# Altium schematic symbol library SG2002_QFN88_38_20230301_4L_V1.3_16.2_Library.SchLib: 126 symbols (part 2 of 5)
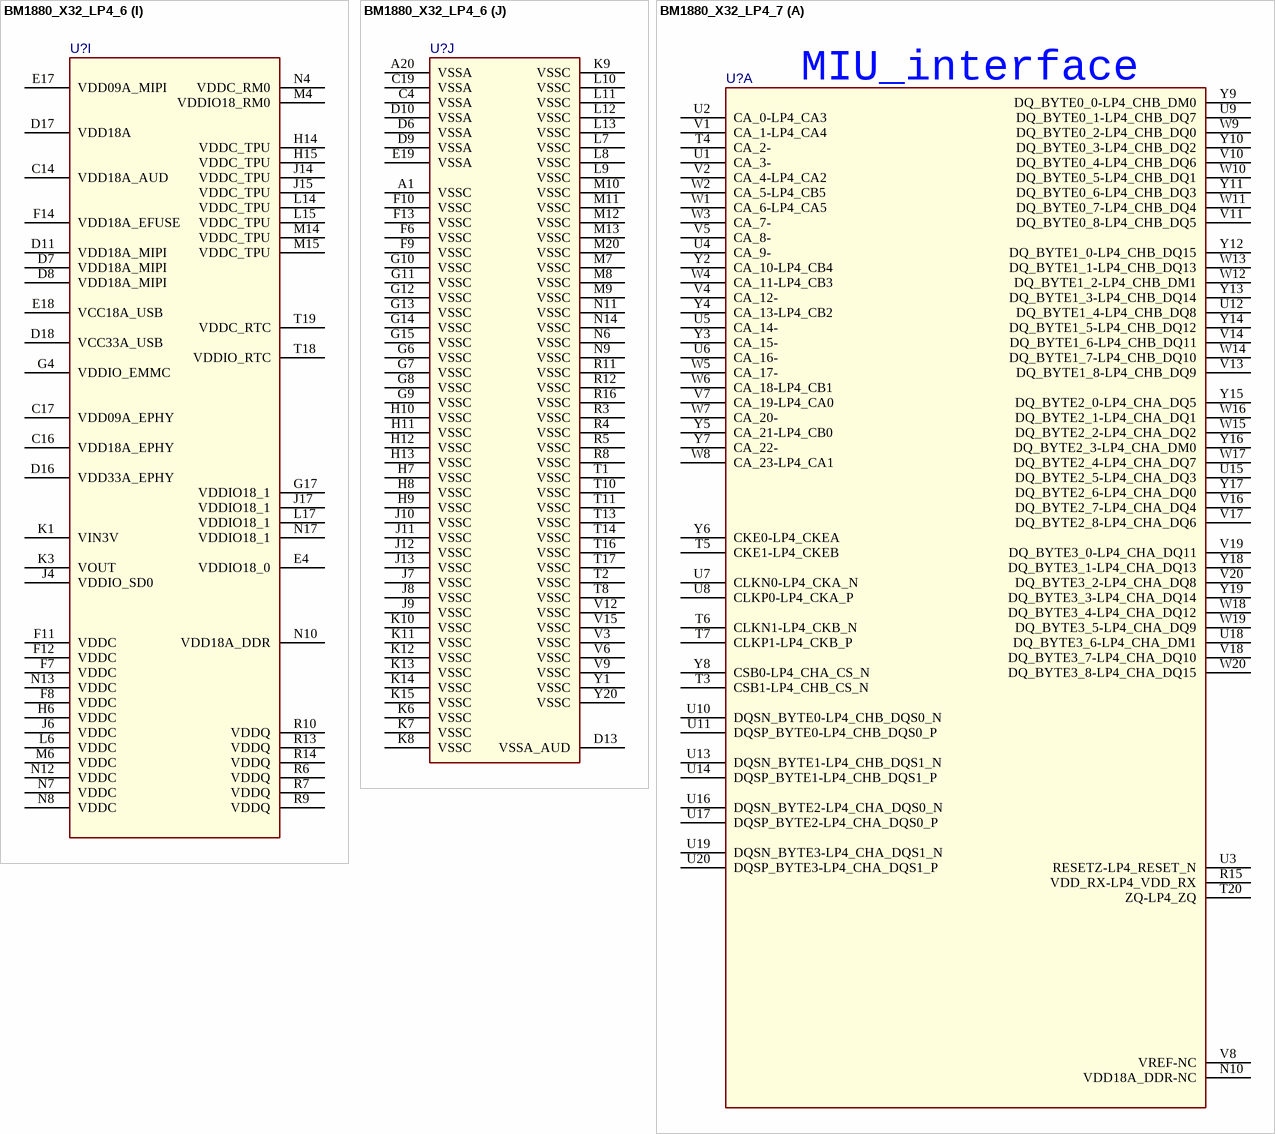
[diagram p50: symbols BM1880_X32_LP4_6 to BM1880_X32_LP4_7]

## BM1880_X32_LP4_6
designator U?
SPLIT_INST: TRUE; SWAP_INFO: (S1+S2+S3+S4+S5+S6+S7+S8+S9+S10)
footprint BGA378-26-2121-socket
part A pins: N10 VDD18A_DDR-NC, R15 VDD_RX-LP4_VDD_RX, T3 CSB1-LP4_CHB_CS_N, T4 CA_2-, T5 CKE1-LP4_CKEB, T6 CLKN1-LP4_CKB_N, T7 CLKP1-LP4_CKB_P, T20 ZQ-LP4_ZQ, U1 CA_3-, U2 CA_0-LP4_CA3, U3 RESETZ-LP4_RESET_N, U4 CA_9-, U5 CA_14-, U6 CA_16-, U7 CLKN0-LP4_CKA_N, U8 CLKP0-LP4_CKA_P, U9 DQ_BYTE0_1-LP4_CHB_DQ7, U10 DQSN_BYTE0-LP4_CHB_DQS0_N, U11 DQSP_BYTE0-LP4_CHB_DQS0_P, U12 DQ_BYTE1_4-LP4_CHB_DQ8, U13 DQSN_BYTE1-LP4_CHB_DQS1_N, U14 DQSP_BYTE1-LP4_CHB_DQS1_P, U15 DQ_BYTE2_5-LP4_CHA_DQ3, U16 DQSN_BYTE2-LP4_CHA_DQS0_N, U17 DQSP_BYTE2-LP4_CHA_DQS0_P, U18 DQ_BYTE3_6-LP4_CHA_DM1, U19 DQSN_BYTE3-LP4_CHA_DQS1_N, U20 DQSP_BYTE3-LP4_CHA_DQS1_P, V1 CA_1-LP4_CA4, V2 CA_4-LP4_CA2, V4 CA_12-, V5 CA_8-, V7 CA_19-LP4_CA0, V8 VREF-NC, V10 DQ_BYTE0_4-LP4_CHB_DQ6, V11 DQ_BYTE0_8-LP4_CHB_DQ5, V13 DQ_BYTE1_8-LP4_CHB_DQ9, V14 DQ_BYTE1_6-LP4_CHB_DQ11, V16 DQ_BYTE2_7-LP4_CHA_DQ4, V17 DQ_BYTE2_8-LP4_CHA_DQ6, V18 DQ_BYTE3_7-LP4_CHA_DQ10, V19 DQ_BYTE3_0-LP4_CHA_DQ11, V20 DQ_BYTE3_2-LP4_CHA_DQ8, W1 CA_6-LP4_CA5, W2 CA_5-LP4_CB5, W3 CA_7-, W4 CA_11-LP4_CB3, W5 CA_17-, W6 CA_18-LP4_CB1, W7 CA_20-, W8 CA_23-LP4_CA1, W9 DQ_BYTE0_2-LP4_CHB_DQ0, W10 DQ_BYTE0_5-LP4_CHB_DQ1, W11 DQ_BYTE0_7-LP4_CHB_DQ4, W12 DQ_BYTE1_2-LP4_CHB_DM1, W13 DQ_BYTE1_1-LP4_CHB_DQ13, W14 DQ_BYTE1_7-LP4_CHB_DQ10, W15 DQ_BYTE2_2-LP4_CHA_DQ2, W16 DQ_BYTE2_1-LP4_CHA_DQ1, W17 DQ_BYTE2_4-LP4_CHA_DQ7, W18 DQ_BYTE3_4-LP4_CHA_DQ12, W19 DQ_BYTE3_5-LP4_CHA_DQ9, W20 DQ_BYTE3_8-LP4_CHA_DQ15, Y2 CA_10-LP4_CB4, Y3 CA_15-, Y4 CA_13-LP4_CB2, Y5 CA_21-LP4_CB0, Y6 CKE0-LP4_CKEA, Y7 CA_22-, Y8 CSB0-LP4_CHA_CS_N, Y9 DQ_BYTE0_0-LP4_CHB_DM0, Y10 DQ_BYTE0_3-LP4_CHB_DQ2, Y11 DQ_BYTE0_6-LP4_CHB_DQ3, Y12 DQ_BYTE1_0-LP4_CHB_DQ15, Y13 DQ_BYTE1_3-LP4_CHB_DQ14, Y14 DQ_BYTE1_5-LP4_CHB_DQ12, Y15 DQ_BYTE2_0-LP4_CHA_DQ5, Y16 DQ_BYTE2_3-LP4_CHA_DM0, Y17 DQ_BYTE2_6-LP4_CHA_DQ0, Y18 DQ_BYTE3_1-LP4_CHA_DQ13, Y19 DQ_BYTE3_3-LP4_CHA_DQ14
part B pins: F3 SDIO0_PWR_EN, F4 SDIO0_CD, G1 EMMC_DAT3, G2 EMMC_RSTN, H1 EMMC_DAT1, H2 EMMC_DAT0, H3 EMMC_CMD, H4 EMMC_CLK, J2 EMMC_CAP, J3 EMMC_DAT2, K2 SDIO0_CAP, K4 SDIO0_CMD, L1 SDIO0_CLK, L2 SDIO0_D0, L3 SDIO0_D3, L4 SDIO0_D1, M1 SDIO0_D2
part C pins: A19 USB_DP (power), B19 USB_DM (power), E20 USB_VBUS_DET (power), F19 USB_ID (power), F20 USB_VBUS_EN, N15 PTEST, P18 PWR_VBAT_DET
part D pins: A15 AADC_AINR_MIC, A16 ADAC_AOUTR, B1 CAM_PD0, B15 AADC_AINL_MIC, B16 ADAC_AOUTL, C1 CAM_MCLK0, C2 IIC0_SDA, C3 IIC3_SCL, C15 ADAC_VREF_DA, D1 CAM_RST0, D2 IIC0_SCL, D3 IIC3_SDA, D14 AADC_VREF_AD, J18 IIC2_SCL, J19 IIC2_SDA, J20 IIC1_SCL, K17 IIC1_SDA, L18 PWM3, M17 PWM1, M18 PWM0_BUCK, M19 PWM2
part E pins: C18 ADC1, E1 JTAG_CPU_TCK, E3 JTAG_CPU_TRST, F1 UART0_RX, F2 UART0_TX, F15 BOOT_MS, F17 UART1_RTS, F18 UART1_CTS, G3 JTAG_CPU_TMS, G18 UART2_CTS, G19 UART1_RX, G20 UART1_TX, H17 UART2_TX, H18 UART2_RX, H19 UART2_RTS, K18 SPI0_SDO, K19 SPI0_SDI, K20 SPI0_CS_X, L19 SPI0_SCK
part F pins: A17 EPHY_TXN, A18 EPHY_RXN, B17 EPHY_TXP, B18 EPHY_RXP, C16 VDD18A_EPHY, C17 VDD09A_EPHY, D15 EPHY_RTX, D16 VDD33A_EPHY, M2 RMII0_REFCLKI, M3 RMII0_TXD1, N2 RMII0_TXEN, N3 RMII0_TXD0, P1 RMII0_MDCK, P2 RMII0_MDIO, P3 RMII0_RXD0, P4 RMII0_RST, R1 RMII0_RXDV, R2 RMII0_RXD1
part G pins: B20 XTAL_XOUT, C20 CLK25M, D19 CLK32K, D20 XTAL_XIN, E2 RSTN, N18 PWR_ON, N19 PWR_SEQ2, N20 PWR_SEQ3, P17 PWR_WAKEUP1, P19 PWR_BUTTON1, P20 PWR_SEQ1, R17 PWR_WAKEUP0, R18 RTC_MODE, R19 RTC_XIN, R20 RTC_XOUT
part H pins: A2 VI_DATA20 (power), A3 VI_DATA22 (power), A4 MIPIRX0_PAD1P (power), A5 MIPIRX0_PAD2P (power), A6 MIPIRX0_PAD3P (power), A7 MIPIRX0_PAD4P (power), A8 MIPIRX1_PAD4P (power), A9 MIPIRX1_PAD2P (power), A10 MIPIRX1_PAD0P (power), A11 PAD_MIPI_TXP0 (power), A12 PAD_MIPI_TXP2 (power), A13 PAD_MIPI_TXP3 (power), A14 VO_DATA0 (power), B2 VI_DATA19 (power), B3 VI_DATA21 (power), B4 MIPIRX0_PAD1N (power), B5 MIPIRX0_PAD2N (power), B6 MIPIRX0_PAD3N (power), B7 MIPIRX0_PAD4N (power), B8 MIPIRX1_PAD4N (power), B9 MIPIRX1_PAD2N (power), B10 MIPIRX1_PAD0N (power), B11 PAD_MIPI_TXM0 (power), B12 PAD_MIPI_TXM2 (power), B13 PAD_MIPI_TXM3 (power), B14 VO_DATA1 (power), C5 MIPIRX0_PAD0P (power), C6 MIPIRX0_PAD0N (power), C7 MIPIRX1_PAD3P (power), C8 MIPIRX1_PAD3N (power), C9 MIPIRX1_PAD1P (power), C10 MIPIRX1_PAD1N (power), C11 PAD_MIPI_TXP1 (power), C12 PAD_MIPI_TXM1 (power), C13 PAD_MIPI_TXM4 (power), D4 VI_DATA23 (power), D5 VI_DATA24 (power), D12 PAD_MIPI_TXP4 (power)
part I pins: C14 VDD18A_AUD (power), C16 VDD18A_EPHY (power), C17 VDD09A_EPHY (power), D7 VDD18A_MIPI (power), D8 VDD18A_MIPI (power), D11 VDD18A_MIPI (power), D16 VDD33A_EPHY (power), D17 VDD18A (power), D18 VCC33A_USB (power), E4 VDDIO18_0 (power), E17 VDD09A_MIPI (power), E18 VCC18A_USB (power), F7 VDDC (power), F8 VDDC (power), F11 VDDC (power), F12 VDDC (power), F14 VDD18A_EFUSE (power), G4 VDDIO_EMMC (power), G17 VDDIO18_1 (power), H6 VDDC (power), H14 VDDC_TPU (power), H15 VDDC_TPU (power), J4 VDDIO_SD0 (power), J6 VDDC (power), J14 VDDC_TPU (power), J15 VDDC_TPU (power), J17 VDDIO18_1 (power), K1 VIN3V (power), K3 VOUT (power), L6 VDDC (power), L14 VDDC_TPU (power), L15 VDDC_TPU (power), L17 VDDIO18_1 (power), M4 VDDIO18_RM0 (power), M6 VDDC (power), M14 VDDC_TPU (power), M15 VDDC_TPU (power), N4 VDDC_RM0 (power), N7 VDDC (power), N8 VDDC (power), N10 VDD18A_DDR (power), N12 VDDC (power), N13 VDDC (power), N17 VDDIO18_1 (power), R6 VDDQ (power), R7 VDDQ (power), R9 VDDQ (power), R10 VDDQ (power), R13 VDDQ (power), R14 VDDQ (power), T18 VDDIO_RTC (power), T19 VDDC_RTC (power)
part J pins: A1 VSSC (power), A20 VSSA (power), C4 VSSA (power), C19 VSSA (power), D6 VSSA (power), D9 VSSA (power), D10 VSSA (power), D13 VSSA_AUD (power), E19 VSSA (power), F6 VSSC (power), F9 VSSC (power), F10 VSSC (power), F13 VSSC (power), G6 VSSC (power), G7 VSSC (power), G8 VSSC (power), G9 VSSC (power), G10 VSSC (power), G11 VSSC (power), G12 VSSC (power), G13 VSSC (power), G14 VSSC (power), G15 VSSC (power), H7 VSSC (power), H8 VSSC (power), H9 VSSC (power), H10 VSSC (power), H11 VSSC (power), H12 VSSC (power), H13 VSSC (power), J7 VSSC (power), J8 VSSC (power), J9 VSSC (power), J10 VSSC (power), J11 VSSC (power), J12 VSSC (power), J13 VSSC (power), K6 VSSC (power), K7 VSSC (power), K8 VSSC (power), K9 VSSC (power), K10 VSSC (power), K11 VSSC (power), K12 VSSC (power), K13 VSSC (power), K14 VSSC (power), K15 VSSC (power), L7 VSSC (power), L8 VSSC (power), L9 VSSC (power), L10 VSSC (power), L11 VSSC (power), L12 VSSC (power), L13 VSSC (power), M7 VSSC (power), M8 VSSC (power), M9 VSSC (power), M10 VSSC (power), M11 VSSC (power), M12 VSSC (power), M13 VSSC (power), M20 VSSC (power), N6 VSSC (power), N9 VSSC (power), N11 VSSC (power), N14 VSSC (power), R3 VSSC (power), R4 VSSC (power), R5 VSSC (power), R8 VSSC (power), R11 VSSC (power), R12 VSSC (power), R16 VSSC (power), T1 VSSC (power), T2 VSSC (power), T8 VSSC (power), T10 VSSC (power), T11 VSSC (power), T13 VSSC (power), T14 VSSC (power), T16 VSSC (power), T17 VSSC (power), V3 VSSC (power), V6 VSSC (power), V9 VSSC (power), V12 VSSC (power), V15 VSSC (power), Y1 VSSC (power), Y20 VSSC (power)
part A text: MIU_interface

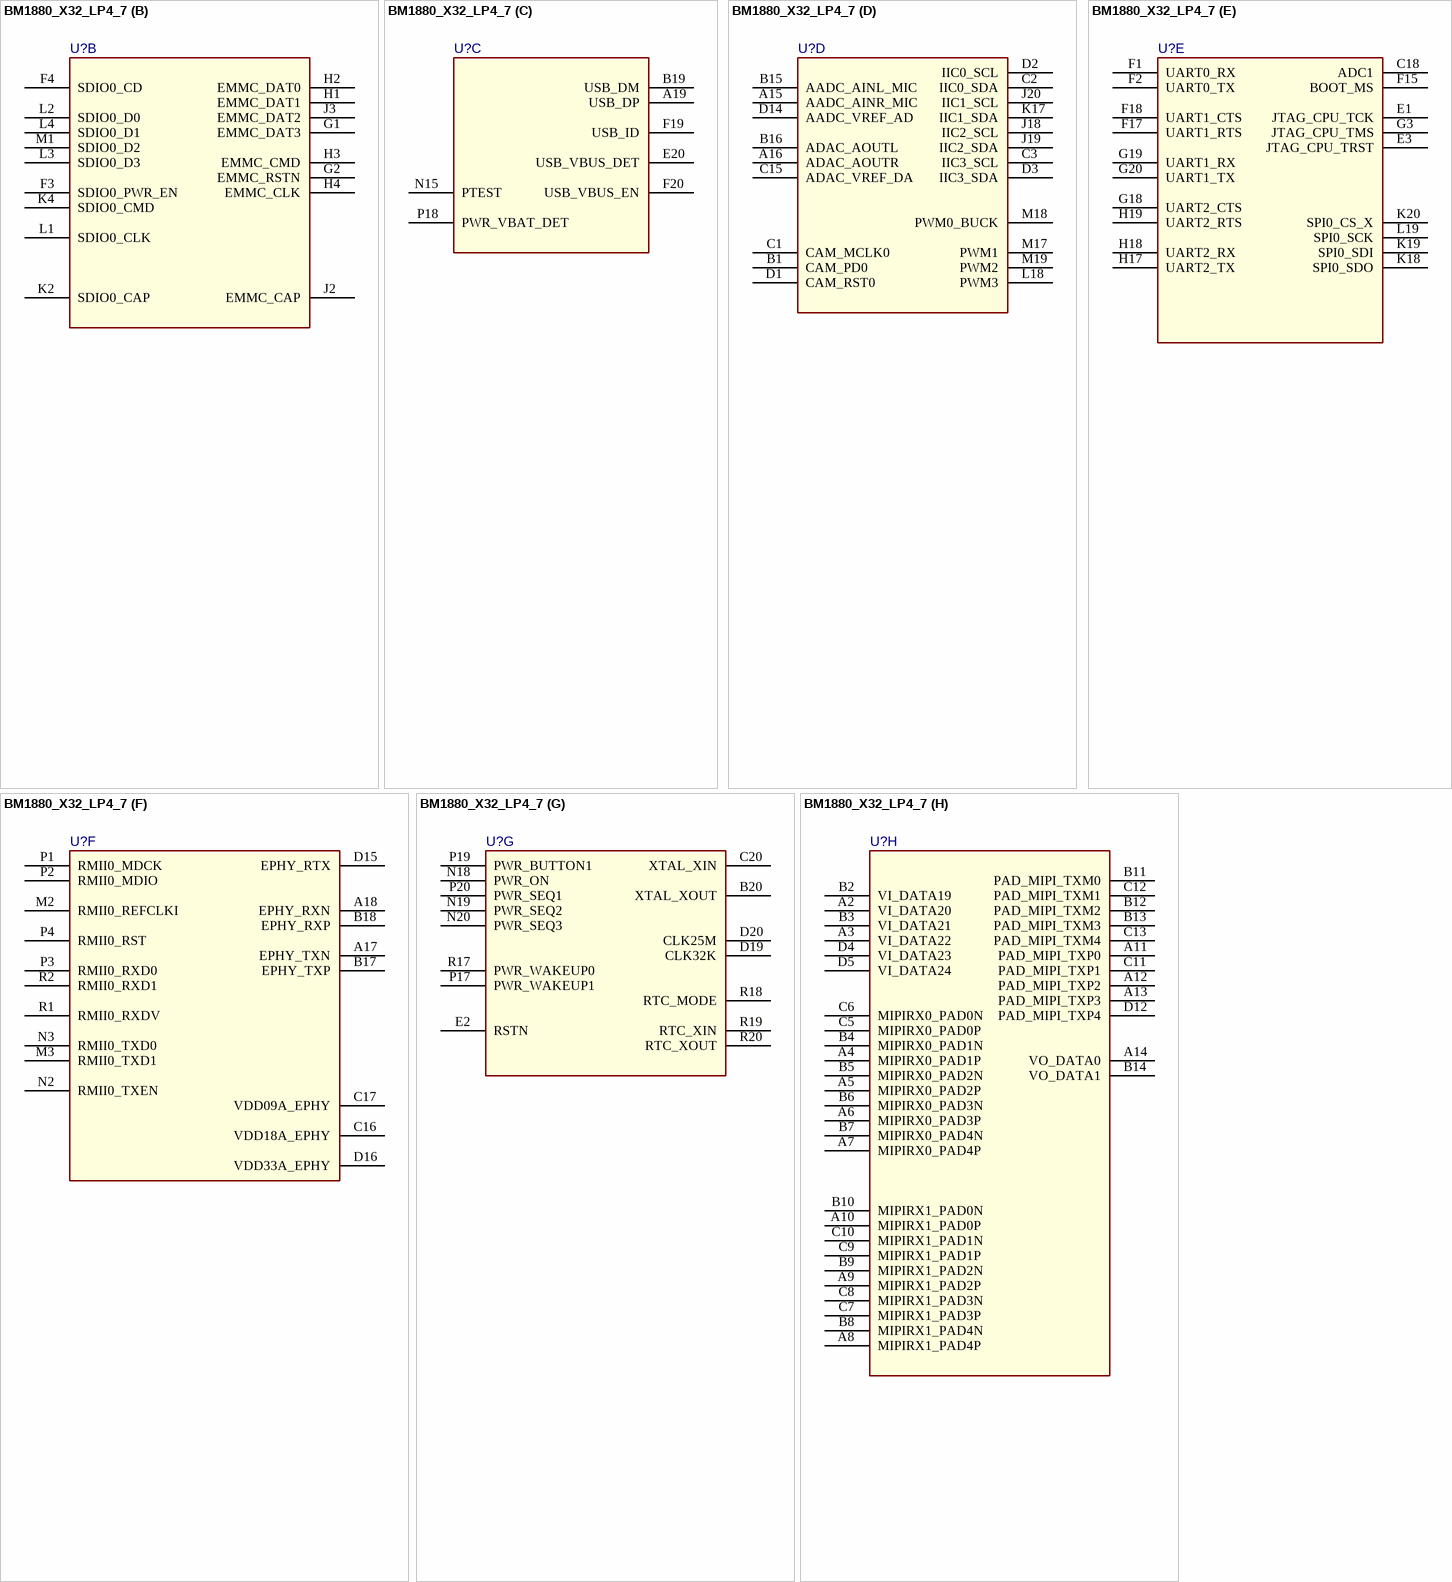
[diagram p15: symbol BM1880_X32_LP4_7]

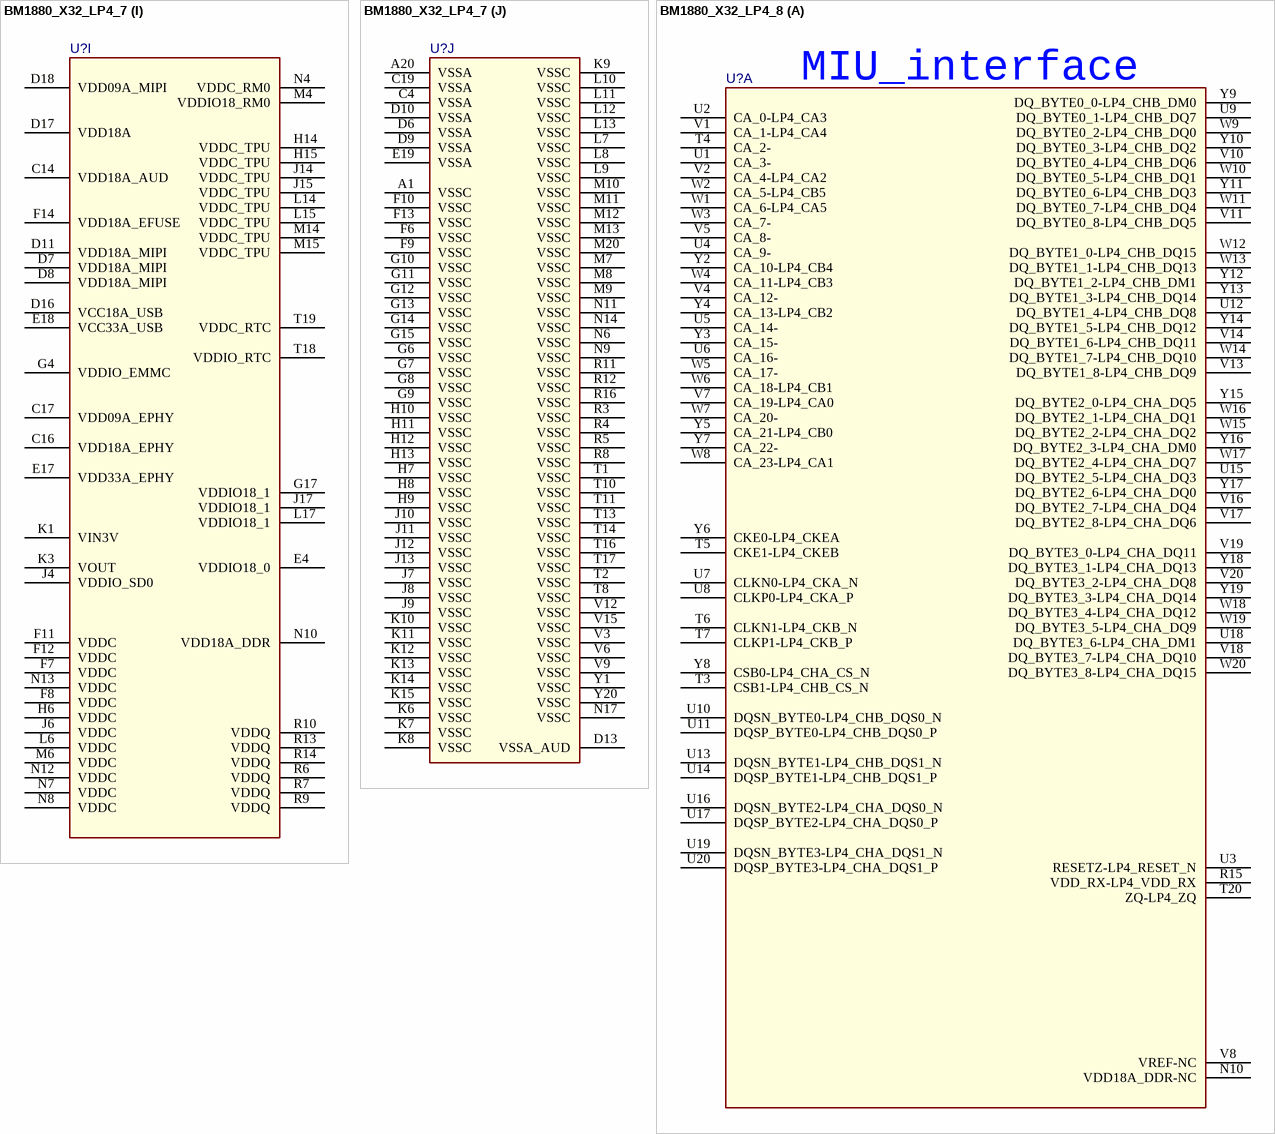
[diagram p16: symbols BM1880_X32_LP4_7 to BM1880_X32_LP4_8]

## BM1880_X32_LP4_7
designator U?
SPLIT_INST: TRUE; SWAP_INFO: (S1+S2+S3+S4+S5+S6+S7+S8+S9+S10)
footprint BGA378-26-2121-socket
part A pins: N10 VDD18A_DDR-NC, R15 VDD_RX-LP4_VDD_RX, T3 CSB1-LP4_CHB_CS_N, T4 CA_2-, T5 CKE1-LP4_CKEB, T6 CLKN1-LP4_CKB_N, T7 CLKP1-LP4_CKB_P, T20 ZQ-LP4_ZQ, U1 CA_3-, U2 CA_0-LP4_CA3, U3 RESETZ-LP4_RESET_N, U4 CA_9-, U5 CA_14-, U6 CA_16-, U7 CLKN0-LP4_CKA_N, U8 CLKP0-LP4_CKA_P, U9 DQ_BYTE0_1-LP4_CHB_DQ7, U10 DQSN_BYTE0-LP4_CHB_DQS0_N, U11 DQSP_BYTE0-LP4_CHB_DQS0_P, U12 DQ_BYTE1_4-LP4_CHB_DQ8, U13 DQSN_BYTE1-LP4_CHB_DQS1_N, U14 DQSP_BYTE1-LP4_CHB_DQS1_P, U15 DQ_BYTE2_5-LP4_CHA_DQ3, U16 DQSN_BYTE2-LP4_CHA_DQS0_N, U17 DQSP_BYTE2-LP4_CHA_DQS0_P, U18 DQ_BYTE3_6-LP4_CHA_DM1, U19 DQSN_BYTE3-LP4_CHA_DQS1_N, U20 DQSP_BYTE3-LP4_CHA_DQS1_P, V1 CA_1-LP4_CA4, V2 CA_4-LP4_CA2, V4 CA_12-, V5 CA_8-, V7 CA_19-LP4_CA0, V8 VREF-NC, V10 DQ_BYTE0_4-LP4_CHB_DQ6, V11 DQ_BYTE0_8-LP4_CHB_DQ5, V13 DQ_BYTE1_8-LP4_CHB_DQ9, V14 DQ_BYTE1_6-LP4_CHB_DQ11, V16 DQ_BYTE2_7-LP4_CHA_DQ4, V17 DQ_BYTE2_8-LP4_CHA_DQ6, V18 DQ_BYTE3_7-LP4_CHA_DQ10, V19 DQ_BYTE3_0-LP4_CHA_DQ11, V20 DQ_BYTE3_2-LP4_CHA_DQ8, W1 CA_6-LP4_CA5, W2 CA_5-LP4_CB5, W3 CA_7-, W4 CA_11-LP4_CB3, W5 CA_17-, W6 CA_18-LP4_CB1, W7 CA_20-, W8 CA_23-LP4_CA1, W9 DQ_BYTE0_2-LP4_CHB_DQ0, W10 DQ_BYTE0_5-LP4_CHB_DQ1, W11 DQ_BYTE0_7-LP4_CHB_DQ4, W12 DQ_BYTE1_2-LP4_CHB_DM1, W13 DQ_BYTE1_1-LP4_CHB_DQ13, W14 DQ_BYTE1_7-LP4_CHB_DQ10, W15 DQ_BYTE2_2-LP4_CHA_DQ2, W16 DQ_BYTE2_1-LP4_CHA_DQ1, W17 DQ_BYTE2_4-LP4_CHA_DQ7, W18 DQ_BYTE3_4-LP4_CHA_DQ12, W19 DQ_BYTE3_5-LP4_CHA_DQ9, W20 DQ_BYTE3_8-LP4_CHA_DQ15, Y2 CA_10-LP4_CB4, Y3 CA_15-, Y4 CA_13-LP4_CB2, Y5 CA_21-LP4_CB0, Y6 CKE0-LP4_CKEA, Y7 CA_22-, Y8 CSB0-LP4_CHA_CS_N, Y9 DQ_BYTE0_0-LP4_CHB_DM0, Y10 DQ_BYTE0_3-LP4_CHB_DQ2, Y11 DQ_BYTE0_6-LP4_CHB_DQ3, Y12 DQ_BYTE1_0-LP4_CHB_DQ15, Y13 DQ_BYTE1_3-LP4_CHB_DQ14, Y14 DQ_BYTE1_5-LP4_CHB_DQ12, Y15 DQ_BYTE2_0-LP4_CHA_DQ5, Y16 DQ_BYTE2_3-LP4_CHA_DM0, Y17 DQ_BYTE2_6-LP4_CHA_DQ0, Y18 DQ_BYTE3_1-LP4_CHA_DQ13, Y19 DQ_BYTE3_3-LP4_CHA_DQ14
part B pins: F3 SDIO0_PWR_EN, F4 SDIO0_CD, G1 EMMC_DAT3, G2 EMMC_RSTN, H1 EMMC_DAT1, H2 EMMC_DAT0, H3 EMMC_CMD, H4 EMMC_CLK, J2 EMMC_CAP, J3 EMMC_DAT2, K2 SDIO0_CAP, K4 SDIO0_CMD, L1 SDIO0_CLK, L2 SDIO0_D0, L3 SDIO0_D3, L4 SDIO0_D1, M1 SDIO0_D2
part C pins: A19 USB_DP (power), B19 USB_DM (power), E20 USB_VBUS_DET (power), F19 USB_ID (power), F20 USB_VBUS_EN, N15 PTEST, P18 PWR_VBAT_DET
part D pins: A15 AADC_AINR_MIC, A16 ADAC_AOUTR, B1 CAM_PD0, B15 AADC_AINL_MIC, B16 ADAC_AOUTL, C1 CAM_MCLK0, C2 IIC0_SDA, C3 IIC3_SCL, C15 ADAC_VREF_DA, D1 CAM_RST0, D2 IIC0_SCL, D3 IIC3_SDA, D14 AADC_VREF_AD, J18 IIC2_SCL, J19 IIC2_SDA, J20 IIC1_SCL, K17 IIC1_SDA, L18 PWM3, M17 PWM1, M18 PWM0_BUCK, M19 PWM2
part E pins: C18 ADC1, E1 JTAG_CPU_TCK, E3 JTAG_CPU_TRST, F1 UART0_RX, F2 UART0_TX, F15 BOOT_MS, F17 UART1_RTS, F18 UART1_CTS, G3 JTAG_CPU_TMS, G18 UART2_CTS, G19 UART1_RX, G20 UART1_TX, H17 UART2_TX, H18 UART2_RX, H19 UART2_RTS, K18 SPI0_SDO, K19 SPI0_SDI, K20 SPI0_CS_X, L19 SPI0_SCK
part F pins: A17 EPHY_TXN, A18 EPHY_RXN, B17 EPHY_TXP, B18 EPHY_RXP, C16 VDD18A_EPHY, C17 VDD09A_EPHY, D15 EPHY_RTX, D16 VDD33A_EPHY, M2 RMII0_REFCLKI, M3 RMII0_TXD1, N2 RMII0_TXEN, N3 RMII0_TXD0, P1 RMII0_MDCK, P2 RMII0_MDIO, P3 RMII0_RXD0, P4 RMII0_RST, R1 RMII0_RXDV, R2 RMII0_RXD1
part G pins: B20 XTAL_XOUT, C20 XTAL_XIN, D19 CLK32K, D20 CLK25M, E2 RSTN, N18 PWR_ON, N19 PWR_SEQ2, N20 PWR_SEQ3, P17 PWR_WAKEUP1, P19 PWR_BUTTON1, P20 PWR_SEQ1, R17 PWR_WAKEUP0, R18 RTC_MODE, R19 RTC_XIN, R20 RTC_XOUT
part H pins: A2 VI_DATA20 (power), A3 VI_DATA22 (power), A4 MIPIRX0_PAD1P (power), A5 MIPIRX0_PAD2P (power), A6 MIPIRX0_PAD3P (power), A7 MIPIRX0_PAD4P (power), A8 MIPIRX1_PAD4P (power), A9 MIPIRX1_PAD2P (power), A10 MIPIRX1_PAD0P (power), A11 PAD_MIPI_TXP0 (power), A12 PAD_MIPI_TXP2 (power), A13 PAD_MIPI_TXP3 (power), A14 VO_DATA0 (power), B2 VI_DATA19 (power), B3 VI_DATA21 (power), B4 MIPIRX0_PAD1N (power), B5 MIPIRX0_PAD2N (power), B6 MIPIRX0_PAD3N (power), B7 MIPIRX0_PAD4N (power), B8 MIPIRX1_PAD4N (power), B9 MIPIRX1_PAD2N (power), B10 MIPIRX1_PAD0N (power), B11 PAD_MIPI_TXM0 (power), B12 PAD_MIPI_TXM2 (power), B13 PAD_MIPI_TXM3 (power), B14 VO_DATA1 (power), C5 MIPIRX0_PAD0P (power), C6 MIPIRX0_PAD0N (power), C7 MIPIRX1_PAD3P (power), C8 MIPIRX1_PAD3N (power), C9 MIPIRX1_PAD1P (power), C10 MIPIRX1_PAD1N (power), C11 PAD_MIPI_TXP1 (power), C12 PAD_MIPI_TXM1 (power), C13 PAD_MIPI_TXM4 (power), D4 VI_DATA23 (power), D5 VI_DATA24 (power), D12 PAD_MIPI_TXP4 (power)
part I pins: C14 VDD18A_AUD (power), C16 VDD18A_EPHY (power), C17 VDD09A_EPHY (power), D7 VDD18A_MIPI (power), D8 VDD18A_MIPI (power), D11 VDD18A_MIPI (power), D16 VCC18A_USB (power), D17 VDD18A (power), D18 VDD09A_MIPI (power), E4 VDDIO18_0 (power), E17 VDD33A_EPHY (power), E18 VCC33A_USB (power), F7 VDDC (power), F8 VDDC (power), F11 VDDC (power), F12 VDDC (power), F14 VDD18A_EFUSE (power), G4 VDDIO_EMMC (power), G17 VDDIO18_1 (power), H6 VDDC (power), H14 VDDC_TPU (power), H15 VDDC_TPU (power), J4 VDDIO_SD0 (power), J6 VDDC (power), J14 VDDC_TPU (power), J15 VDDC_TPU (power), J17 VDDIO18_1 (power), K1 VIN3V (power), K3 VOUT (power), L6 VDDC (power), L14 VDDC_TPU (power), L15 VDDC_TPU (power), L17 VDDIO18_1 (power), M4 VDDIO18_RM0 (power), M6 VDDC (power), M14 VDDC_TPU (power), M15 VDDC_TPU (power), N4 VDDC_RM0 (power), N7 VDDC (power), N8 VDDC (power), N10 VDD18A_DDR (power), N12 VDDC (power), N13 VDDC (power), R6 VDDQ (power), R7 VDDQ (power), R9 VDDQ (power), R10 VDDQ (power), R13 VDDQ (power), R14 VDDQ (power), T18 VDDIO_RTC (power), T19 VDDC_RTC (power)
part J pins: A1 VSSC (power), A20 VSSA (power), C4 VSSA (power), C19 VSSA (power), D6 VSSA (power), D9 VSSA (power), D10 VSSA (power), D13 VSSA_AUD (power), E19 VSSA (power), F6 VSSC (power), F9 VSSC (power), F10 VSSC (power), F13 VSSC (power), G6 VSSC (power), G7 VSSC (power), G8 VSSC (power), G9 VSSC (power), G10 VSSC (power), G11 VSSC (power), G12 VSSC (power), G13 VSSC (power), G14 VSSC (power), G15 VSSC (power), H7 VSSC (power), H8 VSSC (power), H9 VSSC (power), H10 VSSC (power), H11 VSSC (power), H12 VSSC (power), H13 VSSC (power), J7 VSSC (power), J8 VSSC (power), J9 VSSC (power), J10 VSSC (power), J11 VSSC (power), J12 VSSC (power), J13 VSSC (power), K6 VSSC (power), K7 VSSC (power), K8 VSSC (power), K9 VSSC (power), K10 VSSC (power), K11 VSSC (power), K12 VSSC (power), K13 VSSC (power), K14 VSSC (power), K15 VSSC (power), L7 VSSC (power), L8 VSSC (power), L9 VSSC (power), L10 VSSC (power), L11 VSSC (power), L12 VSSC (power), L13 VSSC (power), M7 VSSC (power), M8 VSSC (power), M9 VSSC (power), M10 VSSC (power), M11 VSSC (power), M12 VSSC (power), M13 VSSC (power), M20 VSSC (power), N6 VSSC (power), N9 VSSC (power), N11 VSSC (power), N14 VSSC (power), N17 VSSC (power), R3 VSSC (power), R4 VSSC (power), R5 VSSC (power), R8 VSSC (power), R11 VSSC (power), R12 VSSC (power), R16 VSSC (power), T1 VSSC (power), T2 VSSC (power), T8 VSSC (power), T10 VSSC (power), T11 VSSC (power), T13 VSSC (power), T14 VSSC (power), T16 VSSC (power), T17 VSSC (power), V3 VSSC (power), V6 VSSC (power), V9 VSSC (power), V12 VSSC (power), V15 VSSC (power), Y1 VSSC (power), Y20 VSSC (power)
part A text: MIU_interface

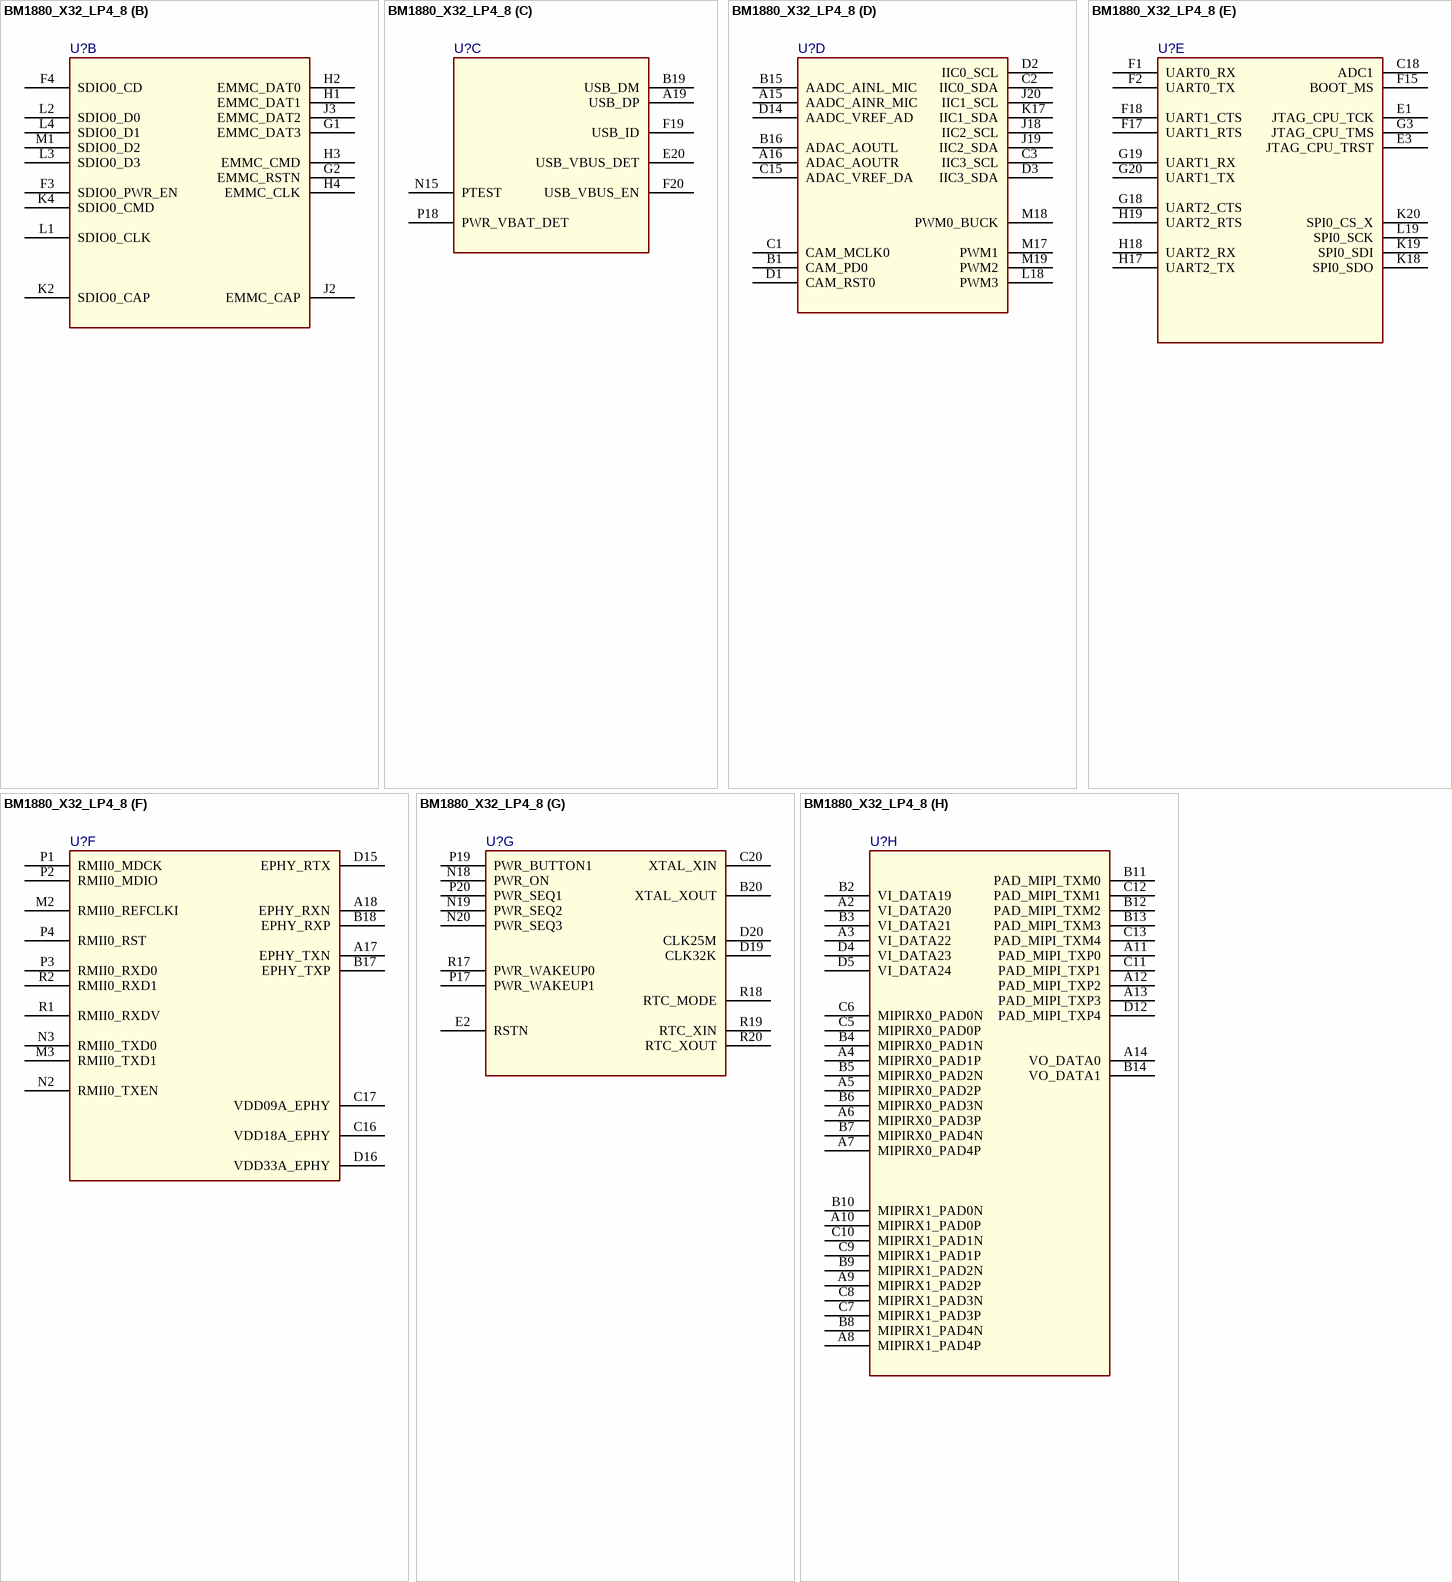
[diagram p17: symbol BM1880_X32_LP4_8]

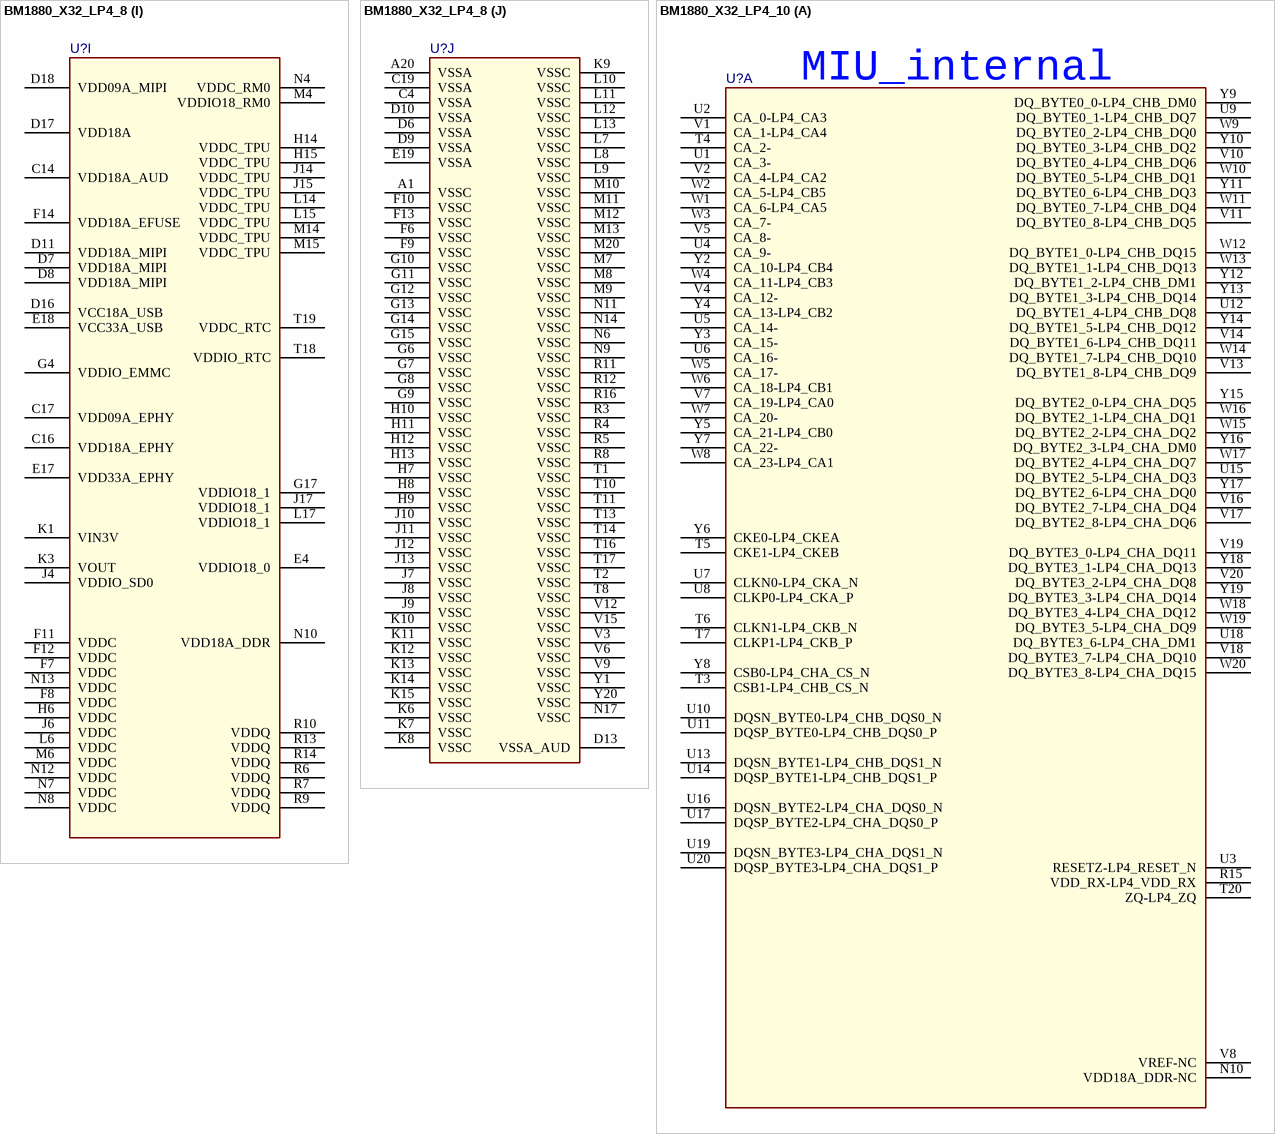
[diagram p18: symbols BM1880_X32_LP4_8 to BM1880_X32_LP4_10]

## BM1880_X32_LP4_8
designator U?
SPLIT_INST: TRUE; SWAP_INFO: (S1+S2+S3+S4+S5+S6+S7+S8+S9+S10)
footprint BGA378-26-2121-socket
part A pins: N10 VDD18A_DDR-NC, R15 VDD_RX-LP4_VDD_RX, T3 CSB1-LP4_CHB_CS_N, T4 CA_2-, T5 CKE1-LP4_CKEB, T6 CLKN1-LP4_CKB_N, T7 CLKP1-LP4_CKB_P, T20 ZQ-LP4_ZQ, U1 CA_3-, U2 CA_0-LP4_CA3, U3 RESETZ-LP4_RESET_N, U4 CA_9-, U5 CA_14-, U6 CA_16-, U7 CLKN0-LP4_CKA_N, U8 CLKP0-LP4_CKA_P, U9 DQ_BYTE0_1-LP4_CHB_DQ7, U10 DQSN_BYTE0-LP4_CHB_DQS0_N, U11 DQSP_BYTE0-LP4_CHB_DQS0_P, U12 DQ_BYTE1_4-LP4_CHB_DQ8, U13 DQSN_BYTE1-LP4_CHB_DQS1_N, U14 DQSP_BYTE1-LP4_CHB_DQS1_P, U15 DQ_BYTE2_5-LP4_CHA_DQ3, U16 DQSN_BYTE2-LP4_CHA_DQS0_N, U17 DQSP_BYTE2-LP4_CHA_DQS0_P, U18 DQ_BYTE3_6-LP4_CHA_DM1, U19 DQSN_BYTE3-LP4_CHA_DQS1_N, U20 DQSP_BYTE3-LP4_CHA_DQS1_P, V1 CA_1-LP4_CA4, V2 CA_4-LP4_CA2, V4 CA_12-, V5 CA_8-, V7 CA_19-LP4_CA0, V8 VREF-NC, V10 DQ_BYTE0_4-LP4_CHB_DQ6, V11 DQ_BYTE0_8-LP4_CHB_DQ5, V13 DQ_BYTE1_8-LP4_CHB_DQ9, V14 DQ_BYTE1_6-LP4_CHB_DQ11, V16 DQ_BYTE2_7-LP4_CHA_DQ4, V17 DQ_BYTE2_8-LP4_CHA_DQ6, V18 DQ_BYTE3_7-LP4_CHA_DQ10, V19 DQ_BYTE3_0-LP4_CHA_DQ11, V20 DQ_BYTE3_2-LP4_CHA_DQ8, W1 CA_6-LP4_CA5, W2 CA_5-LP4_CB5, W3 CA_7-, W4 CA_11-LP4_CB3, W5 CA_17-, W6 CA_18-LP4_CB1, W7 CA_20-, W8 CA_23-LP4_CA1, W9 DQ_BYTE0_2-LP4_CHB_DQ0, W10 DQ_BYTE0_5-LP4_CHB_DQ1, W11 DQ_BYTE0_7-LP4_CHB_DQ4, W12 DQ_BYTE1_0-LP4_CHB_DQ15, W13 DQ_BYTE1_1-LP4_CHB_DQ13, W14 DQ_BYTE1_7-LP4_CHB_DQ10, W15 DQ_BYTE2_2-LP4_CHA_DQ2, W16 DQ_BYTE2_1-LP4_CHA_DQ1, W17 DQ_BYTE2_4-LP4_CHA_DQ7, W18 DQ_BYTE3_4-LP4_CHA_DQ12, W19 DQ_BYTE3_5-LP4_CHA_DQ9, W20 DQ_BYTE3_8-LP4_CHA_DQ15, Y2 CA_10-LP4_CB4, Y3 CA_15-, Y4 CA_13-LP4_CB2, Y5 CA_21-LP4_CB0, Y6 CKE0-LP4_CKEA, Y7 CA_22-, Y8 CSB0-LP4_CHA_CS_N, Y9 DQ_BYTE0_0-LP4_CHB_DM0, Y10 DQ_BYTE0_3-LP4_CHB_DQ2, Y11 DQ_BYTE0_6-LP4_CHB_DQ3, Y12 DQ_BYTE1_2-LP4_CHB_DM1, Y13 DQ_BYTE1_3-LP4_CHB_DQ14, Y14 DQ_BYTE1_5-LP4_CHB_DQ12, Y15 DQ_BYTE2_0-LP4_CHA_DQ5, Y16 DQ_BYTE2_3-LP4_CHA_DM0, Y17 DQ_BYTE2_6-LP4_CHA_DQ0, Y18 DQ_BYTE3_1-LP4_CHA_DQ13, Y19 DQ_BYTE3_3-LP4_CHA_DQ14
part B pins: F3 SDIO0_PWR_EN, F4 SDIO0_CD, G1 EMMC_DAT3, G2 EMMC_RSTN, H1 EMMC_DAT1, H2 EMMC_DAT0, H3 EMMC_CMD, H4 EMMC_CLK, J2 EMMC_CAP, J3 EMMC_DAT2, K2 SDIO0_CAP, K4 SDIO0_CMD, L1 SDIO0_CLK, L2 SDIO0_D0, L3 SDIO0_D3, L4 SDIO0_D1, M1 SDIO0_D2
part C pins: A19 USB_DP (power), B19 USB_DM (power), E20 USB_VBUS_DET (power), F19 USB_ID (power), F20 USB_VBUS_EN, N15 PTEST, P18 PWR_VBAT_DET
part D pins: A15 AADC_AINR_MIC, A16 ADAC_AOUTR, B1 CAM_PD0, B15 AADC_AINL_MIC, B16 ADAC_AOUTL, C1 CAM_MCLK0, C2 IIC0_SDA, C3 IIC3_SCL, C15 ADAC_VREF_DA, D1 CAM_RST0, D2 IIC0_SCL, D3 IIC3_SDA, D14 AADC_VREF_AD, J18 IIC2_SCL, J19 IIC2_SDA, J20 IIC1_SCL, K17 IIC1_SDA, L18 PWM3, M17 PWM1, M18 PWM0_BUCK, M19 PWM2
part E pins: C18 ADC1, E1 JTAG_CPU_TCK, E3 JTAG_CPU_TRST, F1 UART0_RX, F2 UART0_TX, F15 BOOT_MS, F17 UART1_RTS, F18 UART1_CTS, G3 JTAG_CPU_TMS, G18 UART2_CTS, G19 UART1_RX, G20 UART1_TX, H17 UART2_TX, H18 UART2_RX, H19 UART2_RTS, K18 SPI0_SDO, K19 SPI0_SDI, K20 SPI0_CS_X, L19 SPI0_SCK
part F pins: A17 EPHY_TXN, A18 EPHY_RXN, B17 EPHY_TXP, B18 EPHY_RXP, C16 VDD18A_EPHY, C17 VDD09A_EPHY, D15 EPHY_RTX, D16 VDD33A_EPHY, M2 RMII0_REFCLKI, M3 RMII0_TXD1, N2 RMII0_TXEN, N3 RMII0_TXD0, P1 RMII0_MDCK, P2 RMII0_MDIO, P3 RMII0_RXD0, P4 RMII0_RST, R1 RMII0_RXDV, R2 RMII0_RXD1
part G pins: B20 XTAL_XOUT, C20 XTAL_XIN, D19 CLK32K, D20 CLK25M, E2 RSTN, N18 PWR_ON, N19 PWR_SEQ2, N20 PWR_SEQ3, P17 PWR_WAKEUP1, P19 PWR_BUTTON1, P20 PWR_SEQ1, R17 PWR_WAKEUP0, R18 RTC_MODE, R19 RTC_XIN, R20 RTC_XOUT
part H pins: A2 VI_DATA20 (power), A3 VI_DATA22 (power), A4 MIPIRX0_PAD1P (power), A5 MIPIRX0_PAD2P (power), A6 MIPIRX0_PAD3P (power), A7 MIPIRX0_PAD4P (power), A8 MIPIRX1_PAD4P (power), A9 MIPIRX1_PAD2P (power), A10 MIPIRX1_PAD0P (power), A11 PAD_MIPI_TXP0 (power), A12 PAD_MIPI_TXP2 (power), A13 PAD_MIPI_TXP3 (power), A14 VO_DATA0 (power), B2 VI_DATA19 (power), B3 VI_DATA21 (power), B4 MIPIRX0_PAD1N (power), B5 MIPIRX0_PAD2N (power), B6 MIPIRX0_PAD3N (power), B7 MIPIRX0_PAD4N (power), B8 MIPIRX1_PAD4N (power), B9 MIPIRX1_PAD2N (power), B10 MIPIRX1_PAD0N (power), B11 PAD_MIPI_TXM0 (power), B12 PAD_MIPI_TXM2 (power), B13 PAD_MIPI_TXM3 (power), B14 VO_DATA1 (power), C5 MIPIRX0_PAD0P (power), C6 MIPIRX0_PAD0N (power), C7 MIPIRX1_PAD3P (power), C8 MIPIRX1_PAD3N (power), C9 MIPIRX1_PAD1P (power), C10 MIPIRX1_PAD1N (power), C11 PAD_MIPI_TXP1 (power), C12 PAD_MIPI_TXM1 (power), C13 PAD_MIPI_TXM4 (power), D4 VI_DATA23 (power), D5 VI_DATA24 (power), D12 PAD_MIPI_TXP4 (power)
part I pins: C14 VDD18A_AUD (power), C16 VDD18A_EPHY (power), C17 VDD09A_EPHY (power), D7 VDD18A_MIPI (power), D8 VDD18A_MIPI (power), D11 VDD18A_MIPI (power), D16 VCC18A_USB (power), D17 VDD18A (power), D18 VDD09A_MIPI (power), E4 VDDIO18_0 (power), E17 VDD33A_EPHY (power), E18 VCC33A_USB (power), F7 VDDC (power), F8 VDDC (power), F11 VDDC (power), F12 VDDC (power), F14 VDD18A_EFUSE (power), G4 VDDIO_EMMC (power), G17 VDDIO18_1 (power), H6 VDDC (power), H14 VDDC_TPU (power), H15 VDDC_TPU (power), J4 VDDIO_SD0 (power), J6 VDDC (power), J14 VDDC_TPU (power), J15 VDDC_TPU (power), J17 VDDIO18_1 (power), K1 VIN3V (power), K3 VOUT (power), L6 VDDC (power), L14 VDDC_TPU (power), L15 VDDC_TPU (power), L17 VDDIO18_1 (power), M4 VDDIO18_RM0 (power), M6 VDDC (power), M14 VDDC_TPU (power), M15 VDDC_TPU (power), N4 VDDC_RM0 (power), N7 VDDC (power), N8 VDDC (power), N10 VDD18A_DDR (power), N12 VDDC (power), N13 VDDC (power), R6 VDDQ (power), R7 VDDQ (power), R9 VDDQ (power), R10 VDDQ (power), R13 VDDQ (power), R14 VDDQ (power), T18 VDDIO_RTC (power), T19 VDDC_RTC (power)
part J pins: A1 VSSC (power), A20 VSSA (power), C4 VSSA (power), C19 VSSA (power), D6 VSSA (power), D9 VSSA (power), D10 VSSA (power), D13 VSSA_AUD (power), E19 VSSA (power), F6 VSSC (power), F9 VSSC (power), F10 VSSC (power), F13 VSSC (power), G6 VSSC (power), G7 VSSC (power), G8 VSSC (power), G9 VSSC (power), G10 VSSC (power), G11 VSSC (power), G12 VSSC (power), G13 VSSC (power), G14 VSSC (power), G15 VSSC (power), H7 VSSC (power), H8 VSSC (power), H9 VSSC (power), H10 VSSC (power), H11 VSSC (power), H12 VSSC (power), H13 VSSC (power), J7 VSSC (power), J8 VSSC (power), J9 VSSC (power), J10 VSSC (power), J11 VSSC (power), J12 VSSC (power), J13 VSSC (power), K6 VSSC (power), K7 VSSC (power), K8 VSSC (power), K9 VSSC (power), K10 VSSC (power), K11 VSSC (power), K12 VSSC (power), K13 VSSC (power), K14 VSSC (power), K15 VSSC (power), L7 VSSC (power), L8 VSSC (power), L9 VSSC (power), L10 VSSC (power), L11 VSSC (power), L12 VSSC (power), L13 VSSC (power), M7 VSSC (power), M8 VSSC (power), M9 VSSC (power), M10 VSSC (power), M11 VSSC (power), M12 VSSC (power), M13 VSSC (power), M20 VSSC (power), N6 VSSC (power), N9 VSSC (power), N11 VSSC (power), N14 VSSC (power), N17 VSSC (power), R3 VSSC (power), R4 VSSC (power), R5 VSSC (power), R8 VSSC (power), R11 VSSC (power), R12 VSSC (power), R16 VSSC (power), T1 VSSC (power), T2 VSSC (power), T8 VSSC (power), T10 VSSC (power), T11 VSSC (power), T13 VSSC (power), T14 VSSC (power), T16 VSSC (power), T17 VSSC (power), V3 VSSC (power), V6 VSSC (power), V9 VSSC (power), V12 VSSC (power), V15 VSSC (power), Y1 VSSC (power), Y20 VSSC (power)
part A text: MIU_interface

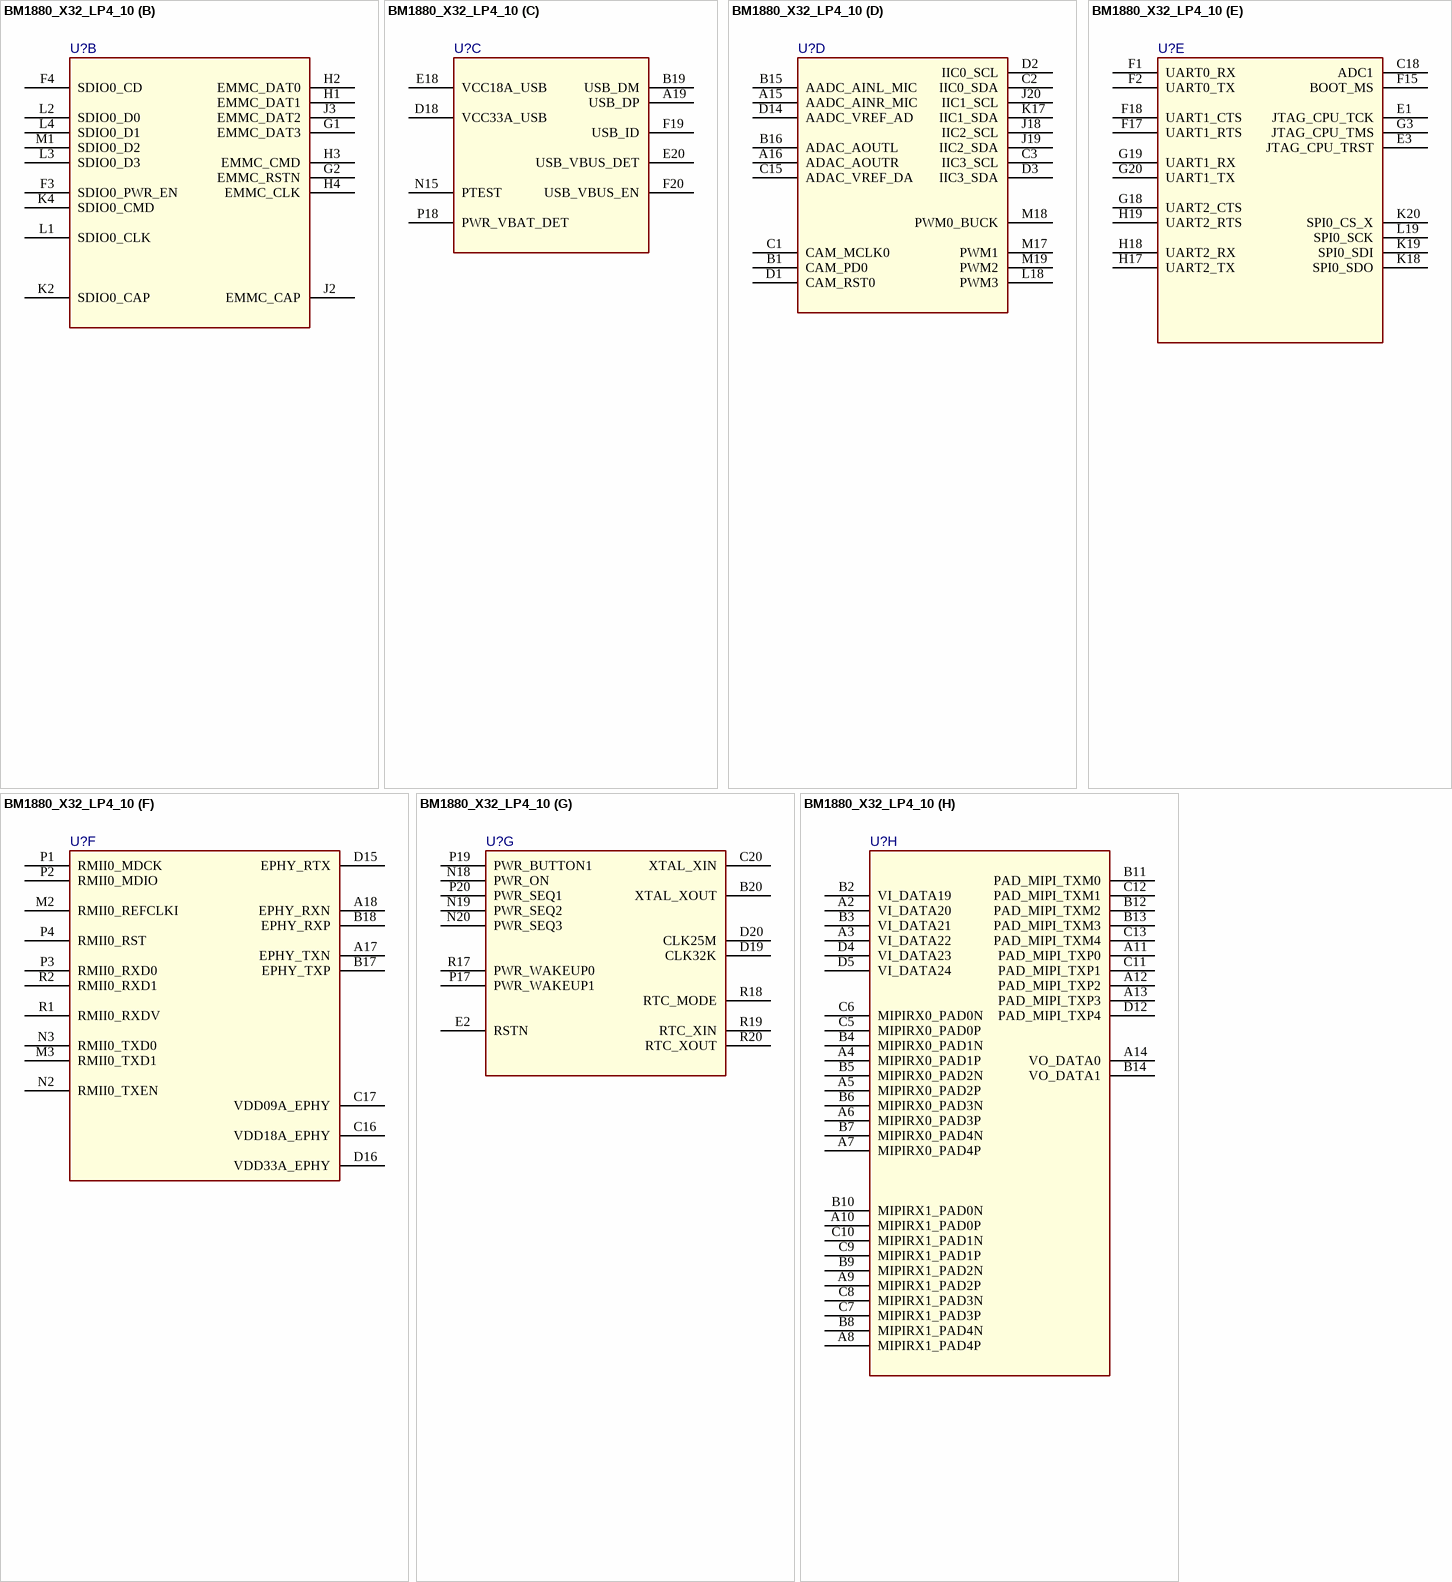
[diagram p19: symbol BM1880_X32_LP4_10]

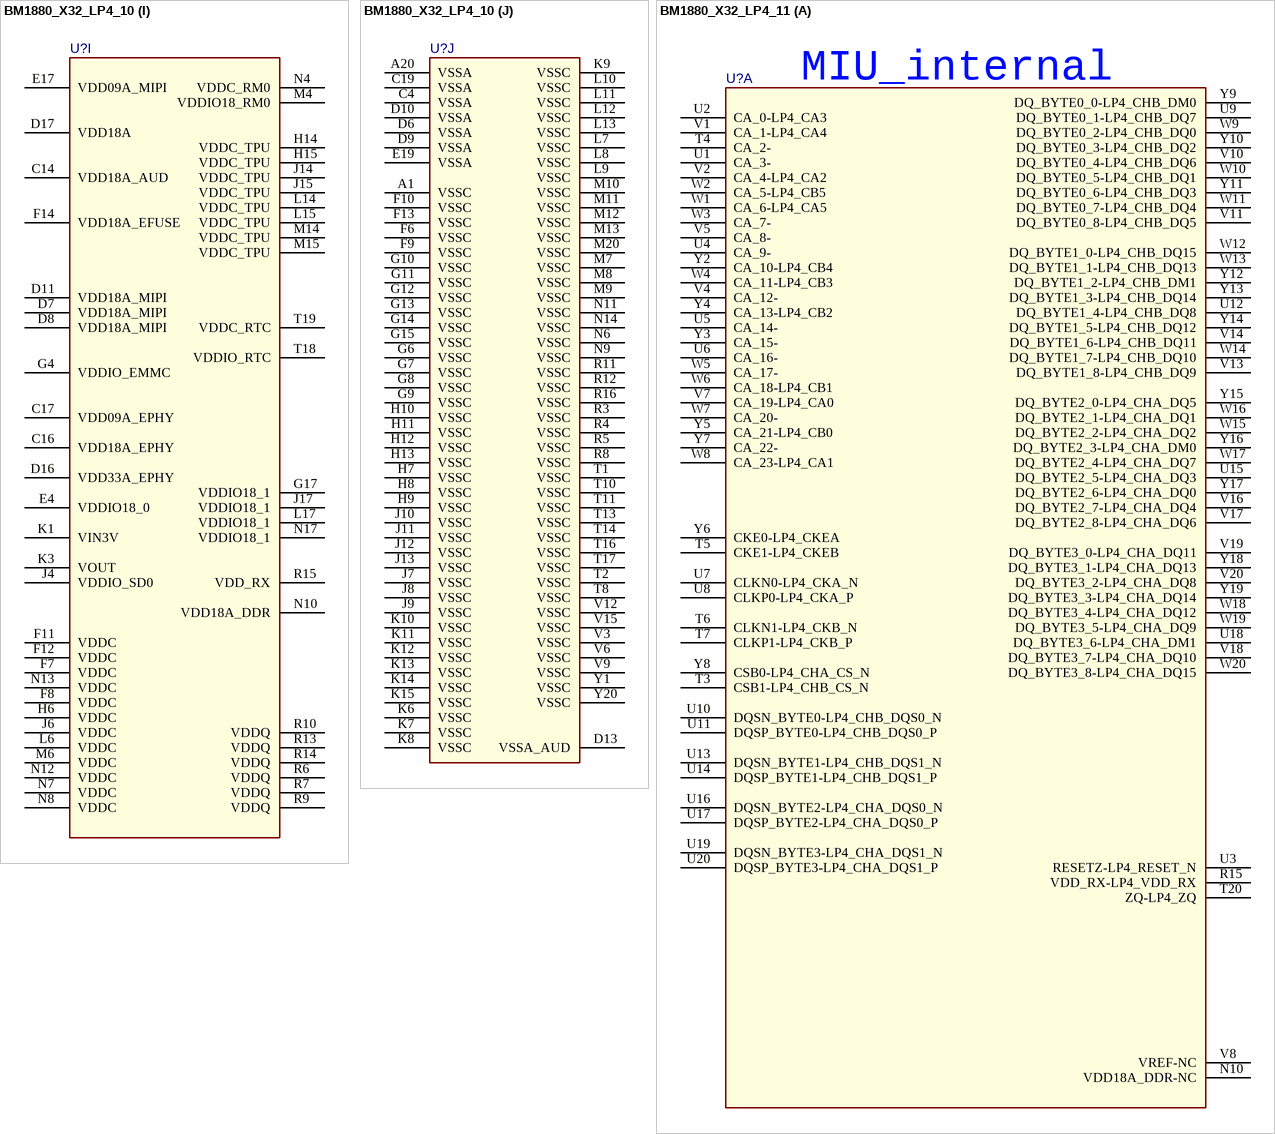
[diagram p20: symbols BM1880_X32_LP4_10 to BM1880_X32_LP4_11]

## BM1880_X32_LP4_10
designator U?
SWAP_INFO: (S1+S2+S3+S4+S5+S6+S7+S8+S9+S10); SPLIT_INST: TRUE
footprint BGA378-26-2121-socket
part A pins: N10 VDD18A_DDR-NC, R15 VDD_RX-LP4_VDD_RX, T3 CSB1-LP4_CHB_CS_N, T4 CA_2-, T5 CKE1-LP4_CKEB, T6 CLKN1-LP4_CKB_N, T7 CLKP1-LP4_CKB_P, T20 ZQ-LP4_ZQ, U1 CA_3-, U2 CA_0-LP4_CA3, U3 RESETZ-LP4_RESET_N, U4 CA_9-, U5 CA_14-, U6 CA_16-, U7 CLKN0-LP4_CKA_N, U8 CLKP0-LP4_CKA_P, U9 DQ_BYTE0_1-LP4_CHB_DQ7, U10 DQSN_BYTE0-LP4_CHB_DQS0_N, U11 DQSP_BYTE0-LP4_CHB_DQS0_P, U12 DQ_BYTE1_4-LP4_CHB_DQ8, U13 DQSN_BYTE1-LP4_CHB_DQS1_N, U14 DQSP_BYTE1-LP4_CHB_DQS1_P, U15 DQ_BYTE2_5-LP4_CHA_DQ3, U16 DQSN_BYTE2-LP4_CHA_DQS0_N, U17 DQSP_BYTE2-LP4_CHA_DQS0_P, U18 DQ_BYTE3_6-LP4_CHA_DM1, U19 DQSN_BYTE3-LP4_CHA_DQS1_N, U20 DQSP_BYTE3-LP4_CHA_DQS1_P, V1 CA_1-LP4_CA4, V2 CA_4-LP4_CA2, V4 CA_12-, V5 CA_8-, V7 CA_19-LP4_CA0, V8 VREF-NC, V10 DQ_BYTE0_4-LP4_CHB_DQ6, V11 DQ_BYTE0_8-LP4_CHB_DQ5, V13 DQ_BYTE1_8-LP4_CHB_DQ9, V14 DQ_BYTE1_6-LP4_CHB_DQ11, V16 DQ_BYTE2_7-LP4_CHA_DQ4, V17 DQ_BYTE2_8-LP4_CHA_DQ6, V18 DQ_BYTE3_7-LP4_CHA_DQ10, V19 DQ_BYTE3_0-LP4_CHA_DQ11, V20 DQ_BYTE3_2-LP4_CHA_DQ8, W1 CA_6-LP4_CA5, W2 CA_5-LP4_CB5, W3 CA_7-, W4 CA_11-LP4_CB3, W5 CA_17-, W6 CA_18-LP4_CB1, W7 CA_20-, W8 CA_23-LP4_CA1, W9 DQ_BYTE0_2-LP4_CHB_DQ0, W10 DQ_BYTE0_5-LP4_CHB_DQ1, W11 DQ_BYTE0_7-LP4_CHB_DQ4, W12 DQ_BYTE1_0-LP4_CHB_DQ15, W13 DQ_BYTE1_1-LP4_CHB_DQ13, W14 DQ_BYTE1_7-LP4_CHB_DQ10, W15 DQ_BYTE2_2-LP4_CHA_DQ2, W16 DQ_BYTE2_1-LP4_CHA_DQ1, W17 DQ_BYTE2_4-LP4_CHA_DQ7, W18 DQ_BYTE3_4-LP4_CHA_DQ12, W19 DQ_BYTE3_5-LP4_CHA_DQ9, W20 DQ_BYTE3_8-LP4_CHA_DQ15, Y2 CA_10-LP4_CB4, Y3 CA_15-, Y4 CA_13-LP4_CB2, Y5 CA_21-LP4_CB0, Y6 CKE0-LP4_CKEA, Y7 CA_22-, Y8 CSB0-LP4_CHA_CS_N, Y9 DQ_BYTE0_0-LP4_CHB_DM0, Y10 DQ_BYTE0_3-LP4_CHB_DQ2, Y11 DQ_BYTE0_6-LP4_CHB_DQ3, Y12 DQ_BYTE1_2-LP4_CHB_DM1, Y13 DQ_BYTE1_3-LP4_CHB_DQ14, Y14 DQ_BYTE1_5-LP4_CHB_DQ12, Y15 DQ_BYTE2_0-LP4_CHA_DQ5, Y16 DQ_BYTE2_3-LP4_CHA_DM0, Y17 DQ_BYTE2_6-LP4_CHA_DQ0, Y18 DQ_BYTE3_1-LP4_CHA_DQ13, Y19 DQ_BYTE3_3-LP4_CHA_DQ14
part B pins: F3 SDIO0_PWR_EN, F4 SDIO0_CD, G1 EMMC_DAT3, G2 EMMC_RSTN, H1 EMMC_DAT1, H2 EMMC_DAT0, H3 EMMC_CMD, H4 EMMC_CLK, J2 EMMC_CAP, J3 EMMC_DAT2, K2 SDIO0_CAP, K4 SDIO0_CMD, L1 SDIO0_CLK, L2 SDIO0_D0, L3 SDIO0_D3, L4 SDIO0_D1, M1 SDIO0_D2
part C pins: A19 USB_DP (power), B19 USB_DM (power), D18 VCC33A_USB, E18 VCC18A_USB, E20 USB_VBUS_DET (power), F19 USB_ID (power), F20 USB_VBUS_EN, N15 PTEST, P18 PWR_VBAT_DET
part D pins: A15 AADC_AINR_MIC, A16 ADAC_AOUTR, B1 CAM_PD0, B15 AADC_AINL_MIC, B16 ADAC_AOUTL, C1 CAM_MCLK0, C2 IIC0_SDA, C3 IIC3_SCL, C15 ADAC_VREF_DA, D1 CAM_RST0, D2 IIC0_SCL, D3 IIC3_SDA, D14 AADC_VREF_AD, J18 IIC2_SCL, J19 IIC2_SDA, J20 IIC1_SCL, K17 IIC1_SDA, L18 PWM3, M17 PWM1, M18 PWM0_BUCK, M19 PWM2
part E pins: C18 ADC1, E1 JTAG_CPU_TCK, E3 JTAG_CPU_TRST, F1 UART0_RX, F2 UART0_TX, F15 BOOT_MS, F17 UART1_RTS, F18 UART1_CTS, G3 JTAG_CPU_TMS, G18 UART2_CTS, G19 UART1_RX, G20 UART1_TX, H17 UART2_TX, H18 UART2_RX, H19 UART2_RTS, K18 SPI0_SDO, K19 SPI0_SDI, K20 SPI0_CS_X, L19 SPI0_SCK
part F pins: A17 EPHY_TXN, A18 EPHY_RXN, B17 EPHY_TXP, B18 EPHY_RXP, C16 VDD18A_EPHY, C17 VDD09A_EPHY, D15 EPHY_RTX, D16 VDD33A_EPHY, M2 RMII0_REFCLKI, M3 RMII0_TXD1, N2 RMII0_TXEN, N3 RMII0_TXD0, P1 RMII0_MDCK, P2 RMII0_MDIO, P3 RMII0_RXD0, P4 RMII0_RST, R1 RMII0_RXDV, R2 RMII0_RXD1
part G pins: B20 XTAL_XOUT, C20 XTAL_XIN, D19 CLK32K, D20 CLK25M, E2 RSTN, N18 PWR_ON, N19 PWR_SEQ2, N20 PWR_SEQ3, P17 PWR_WAKEUP1, P19 PWR_BUTTON1, P20 PWR_SEQ1, R17 PWR_WAKEUP0, R18 RTC_MODE, R19 RTC_XIN, R20 RTC_XOUT
part H pins: A2 VI_DATA20 (power), A3 VI_DATA22 (power), A4 MIPIRX0_PAD1P (power), A5 MIPIRX0_PAD2P (power), A6 MIPIRX0_PAD3P (power), A7 MIPIRX0_PAD4P (power), A8 MIPIRX1_PAD4P (power), A9 MIPIRX1_PAD2P (power), A10 MIPIRX1_PAD0P (power), A11 PAD_MIPI_TXP0 (power), A12 PAD_MIPI_TXP2 (power), A13 PAD_MIPI_TXP3 (power), A14 VO_DATA0 (power), B2 VI_DATA19 (power), B3 VI_DATA21 (power), B4 MIPIRX0_PAD1N (power), B5 MIPIRX0_PAD2N (power), B6 MIPIRX0_PAD3N (power), B7 MIPIRX0_PAD4N (power), B8 MIPIRX1_PAD4N (power), B9 MIPIRX1_PAD2N (power), B10 MIPIRX1_PAD0N (power), B11 PAD_MIPI_TXM0 (power), B12 PAD_MIPI_TXM2 (power), B13 PAD_MIPI_TXM3 (power), B14 VO_DATA1 (power), C5 MIPIRX0_PAD0P (power), C6 MIPIRX0_PAD0N (power), C7 MIPIRX1_PAD3P (power), C8 MIPIRX1_PAD3N (power), C9 MIPIRX1_PAD1P (power), C10 MIPIRX1_PAD1N (power), C11 PAD_MIPI_TXP1 (power), C12 PAD_MIPI_TXM1 (power), C13 PAD_MIPI_TXM4 (power), D4 VI_DATA23 (power), D5 VI_DATA24 (power), D12 PAD_MIPI_TXP4 (power)
part I pins: C14 VDD18A_AUD (power), C16 VDD18A_EPHY (power), C17 VDD09A_EPHY (power), D7 VDD18A_MIPI (power), D8 VDD18A_MIPI (power), D11 VDD18A_MIPI (power), D16 VDD33A_EPHY (power), D17 VDD18A (power), E4 VDDIO18_0 (power), E17 VDD09A_MIPI (power), F7 VDDC (power), F8 VDDC (power), F11 VDDC (power), F12 VDDC (power), F14 VDD18A_EFUSE (power), G4 VDDIO_EMMC (power), G17 VDDIO18_1 (power), H6 VDDC (power), H14 VDDC_TPU (power), H15 VDDC_TPU (power), J4 VDDIO_SD0 (power), J6 VDDC (power), J14 VDDC_TPU (power), J15 VDDC_TPU (power), J17 VDDIO18_1 (power), K1 VIN3V (power), K3 VOUT (power), L6 VDDC (power), L14 VDDC_TPU (power), L15 VDDC_TPU (power), L17 VDDIO18_1 (power), M4 VDDIO18_RM0 (power), M6 VDDC (power), M14 VDDC_TPU (power), M15 VDDC_TPU (power), N4 VDDC_RM0 (power), N7 VDDC (power), N8 VDDC (power), N10 VDD18A_DDR (power), N12 VDDC (power), N13 VDDC (power), N17 VDDIO18_1 (power), R6 VDDQ (power), R7 VDDQ (power), R9 VDDQ (power), R10 VDDQ (power), R13 VDDQ (power), R14 VDDQ (power), R15 VDD_RX (power), T18 VDDIO_RTC (power), T19 VDDC_RTC (power)
part J pins: A1 VSSC (power), A20 VSSA (power), C4 VSSA (power), C19 VSSA (power), D6 VSSA (power), D9 VSSA (power), D10 VSSA (power), D13 VSSA_AUD (power), E19 VSSA (power), F6 VSSC (power), F9 VSSC (power), F10 VSSC (power), F13 VSSC (power), G6 VSSC (power), G7 VSSC (power), G8 VSSC (power), G9 VSSC (power), G10 VSSC (power), G11 VSSC (power), G12 VSSC (power), G13 VSSC (power), G14 VSSC (power), G15 VSSC (power), H7 VSSC (power), H8 VSSC (power), H9 VSSC (power), H10 VSSC (power), H11 VSSC (power), H12 VSSC (power), H13 VSSC (power), J7 VSSC (power), J8 VSSC (power), J9 VSSC (power), J10 VSSC (power), J11 VSSC (power), J12 VSSC (power), J13 VSSC (power), K6 VSSC (power), K7 VSSC (power), K8 VSSC (power), K9 VSSC (power), K10 VSSC (power), K11 VSSC (power), K12 VSSC (power), K13 VSSC (power), K14 VSSC (power), K15 VSSC (power), L7 VSSC (power), L8 VSSC (power), L9 VSSC (power), L10 VSSC (power), L11 VSSC (power), L12 VSSC (power), L13 VSSC (power), M7 VSSC (power), M8 VSSC (power), M9 VSSC (power), M10 VSSC (power), M11 VSSC (power), M12 VSSC (power), M13 VSSC (power), M20 VSSC (power), N6 VSSC (power), N9 VSSC (power), N11 VSSC (power), N14 VSSC (power), R3 VSSC (power), R4 VSSC (power), R5 VSSC (power), R8 VSSC (power), R11 VSSC (power), R12 VSSC (power), R16 VSSC (power), T1 VSSC (power), T2 VSSC (power), T8 VSSC (power), T10 VSSC (power), T11 VSSC (power), T13 VSSC (power), T14 VSSC (power), T16 VSSC (power), T17 VSSC (power), V3 VSSC (power), V6 VSSC (power), V9 VSSC (power), V12 VSSC (power), V15 VSSC (power), Y1 VSSC (power), Y20 VSSC (power)
part A text: MIU_internal

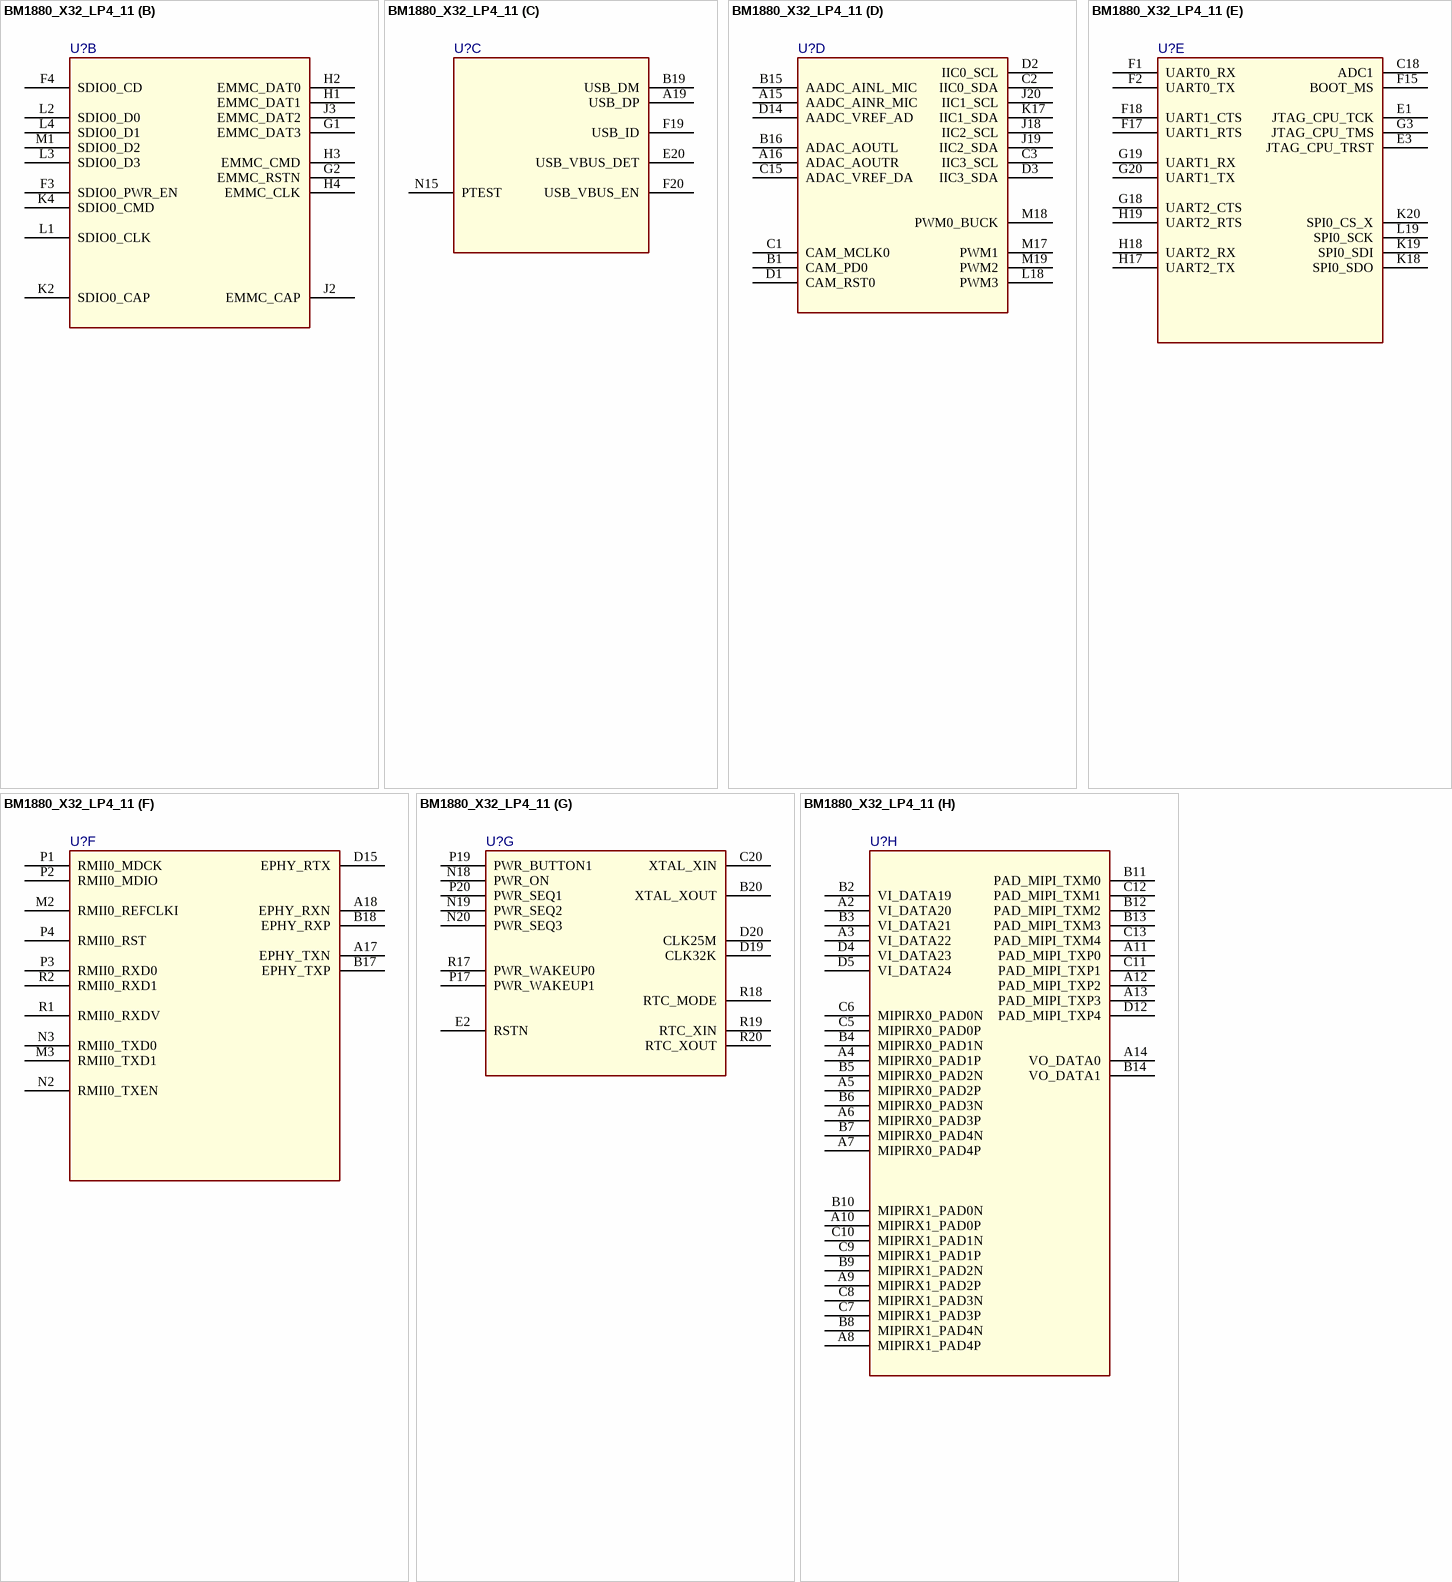
[diagram p21: symbol BM1880_X32_LP4_11]

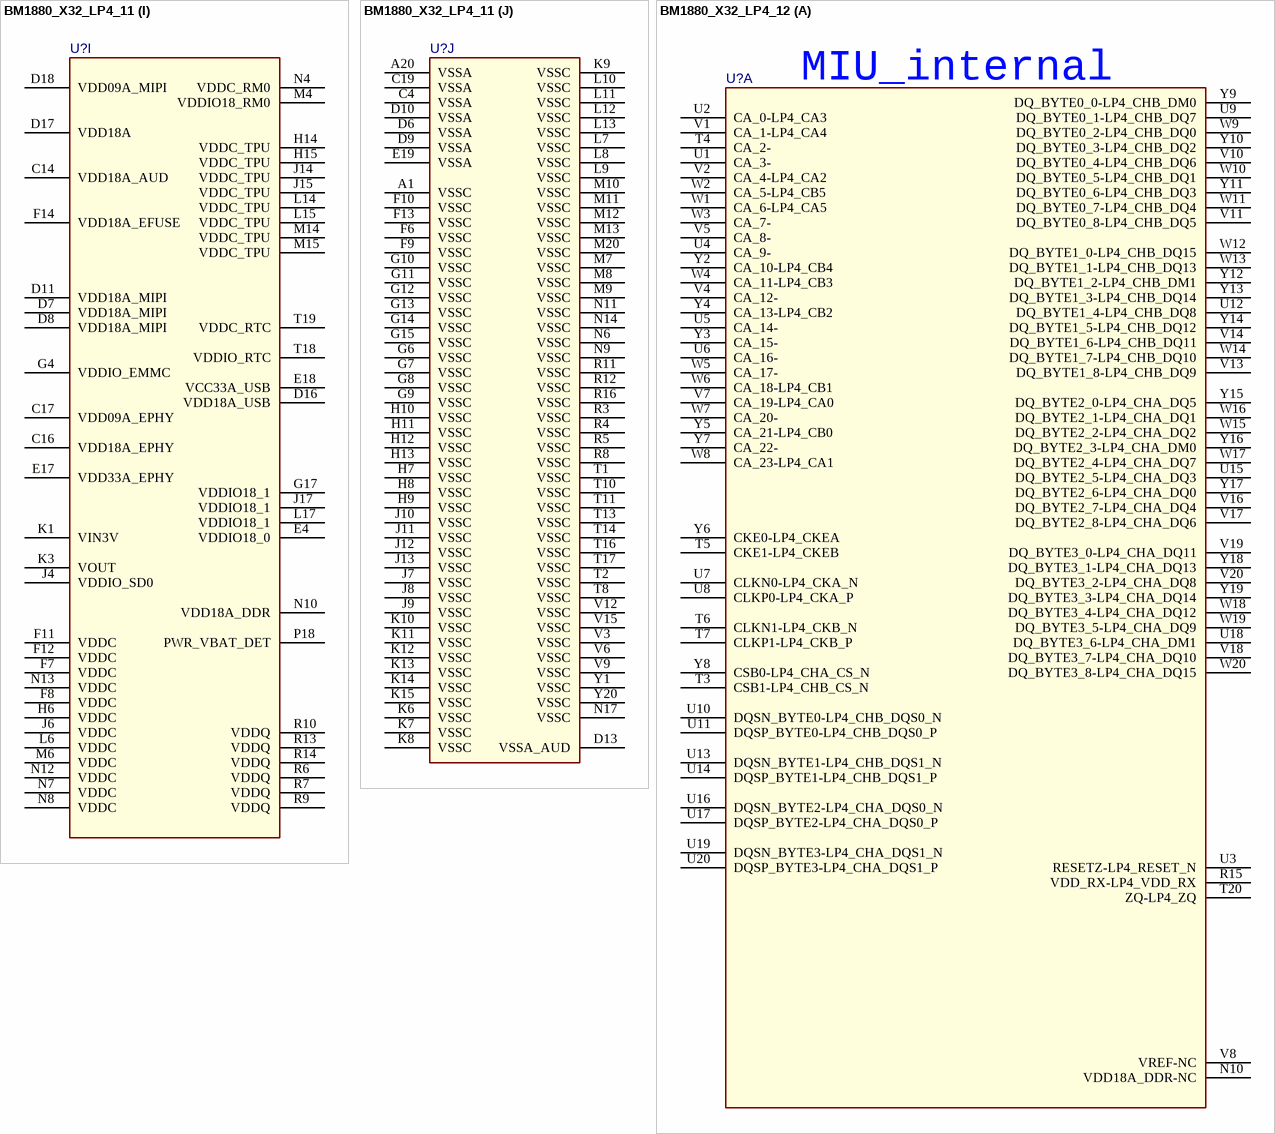
[diagram p22: symbols BM1880_X32_LP4_11 to BM1880_X32_LP4_12]

## BM1880_X32_LP4_11
designator U?
SPLIT_INST: TRUE; SWAP_INFO: (S1+S2+S3+S4+S5+S6+S7+S8+S9+S10)
footprint BGA378-26-2121-socket
part A pins: N10 VDD18A_DDR-NC, R15 VDD_RX-LP4_VDD_RX, T3 CSB1-LP4_CHB_CS_N, T4 CA_2-, T5 CKE1-LP4_CKEB, T6 CLKN1-LP4_CKB_N, T7 CLKP1-LP4_CKB_P, T20 ZQ-LP4_ZQ, U1 CA_3-, U2 CA_0-LP4_CA3, U3 RESETZ-LP4_RESET_N, U4 CA_9-, U5 CA_14-, U6 CA_16-, U7 CLKN0-LP4_CKA_N, U8 CLKP0-LP4_CKA_P, U9 DQ_BYTE0_1-LP4_CHB_DQ7, U10 DQSN_BYTE0-LP4_CHB_DQS0_N, U11 DQSP_BYTE0-LP4_CHB_DQS0_P, U12 DQ_BYTE1_4-LP4_CHB_DQ8, U13 DQSN_BYTE1-LP4_CHB_DQS1_N, U14 DQSP_BYTE1-LP4_CHB_DQS1_P, U15 DQ_BYTE2_5-LP4_CHA_DQ3, U16 DQSN_BYTE2-LP4_CHA_DQS0_N, U17 DQSP_BYTE2-LP4_CHA_DQS0_P, U18 DQ_BYTE3_6-LP4_CHA_DM1, U19 DQSN_BYTE3-LP4_CHA_DQS1_N, U20 DQSP_BYTE3-LP4_CHA_DQS1_P, V1 CA_1-LP4_CA4, V2 CA_4-LP4_CA2, V4 CA_12-, V5 CA_8-, V7 CA_19-LP4_CA0, V8 VREF-NC, V10 DQ_BYTE0_4-LP4_CHB_DQ6, V11 DQ_BYTE0_8-LP4_CHB_DQ5, V13 DQ_BYTE1_8-LP4_CHB_DQ9, V14 DQ_BYTE1_6-LP4_CHB_DQ11, V16 DQ_BYTE2_7-LP4_CHA_DQ4, V17 DQ_BYTE2_8-LP4_CHA_DQ6, V18 DQ_BYTE3_7-LP4_CHA_DQ10, V19 DQ_BYTE3_0-LP4_CHA_DQ11, V20 DQ_BYTE3_2-LP4_CHA_DQ8, W1 CA_6-LP4_CA5, W2 CA_5-LP4_CB5, W3 CA_7-, W4 CA_11-LP4_CB3, W5 CA_17-, W6 CA_18-LP4_CB1, W7 CA_20-, W8 CA_23-LP4_CA1, W9 DQ_BYTE0_2-LP4_CHB_DQ0, W10 DQ_BYTE0_5-LP4_CHB_DQ1, W11 DQ_BYTE0_7-LP4_CHB_DQ4, W12 DQ_BYTE1_0-LP4_CHB_DQ15, W13 DQ_BYTE1_1-LP4_CHB_DQ13, W14 DQ_BYTE1_7-LP4_CHB_DQ10, W15 DQ_BYTE2_2-LP4_CHA_DQ2, W16 DQ_BYTE2_1-LP4_CHA_DQ1, W17 DQ_BYTE2_4-LP4_CHA_DQ7, W18 DQ_BYTE3_4-LP4_CHA_DQ12, W19 DQ_BYTE3_5-LP4_CHA_DQ9, W20 DQ_BYTE3_8-LP4_CHA_DQ15, Y2 CA_10-LP4_CB4, Y3 CA_15-, Y4 CA_13-LP4_CB2, Y5 CA_21-LP4_CB0, Y6 CKE0-LP4_CKEA, Y7 CA_22-, Y8 CSB0-LP4_CHA_CS_N, Y9 DQ_BYTE0_0-LP4_CHB_DM0, Y10 DQ_BYTE0_3-LP4_CHB_DQ2, Y11 DQ_BYTE0_6-LP4_CHB_DQ3, Y12 DQ_BYTE1_2-LP4_CHB_DM1, Y13 DQ_BYTE1_3-LP4_CHB_DQ14, Y14 DQ_BYTE1_5-LP4_CHB_DQ12, Y15 DQ_BYTE2_0-LP4_CHA_DQ5, Y16 DQ_BYTE2_3-LP4_CHA_DM0, Y17 DQ_BYTE2_6-LP4_CHA_DQ0, Y18 DQ_BYTE3_1-LP4_CHA_DQ13, Y19 DQ_BYTE3_3-LP4_CHA_DQ14
part B pins: F3 SDIO0_PWR_EN, F4 SDIO0_CD, G1 EMMC_DAT3, G2 EMMC_RSTN, H1 EMMC_DAT1, H2 EMMC_DAT0, H3 EMMC_CMD, H4 EMMC_CLK, J2 EMMC_CAP, J3 EMMC_DAT2, K2 SDIO0_CAP, K4 SDIO0_CMD, L1 SDIO0_CLK, L2 SDIO0_D0, L3 SDIO0_D3, L4 SDIO0_D1, M1 SDIO0_D2
part C pins: A19 USB_DP (power), B19 USB_DM (power), E20 USB_VBUS_DET (power), F19 USB_ID (power), F20 USB_VBUS_EN, N15 PTEST
part D pins: A15 AADC_AINR_MIC, A16 ADAC_AOUTR, B1 CAM_PD0, B15 AADC_AINL_MIC, B16 ADAC_AOUTL, C1 CAM_MCLK0, C2 IIC0_SDA, C3 IIC3_SCL, C15 ADAC_VREF_DA, D1 CAM_RST0, D2 IIC0_SCL, D3 IIC3_SDA, D14 AADC_VREF_AD, J18 IIC2_SCL, J19 IIC2_SDA, J20 IIC1_SCL, K17 IIC1_SDA, L18 PWM3, M17 PWM1, M18 PWM0_BUCK, M19 PWM2
part E pins: C18 ADC1, E1 JTAG_CPU_TCK, E3 JTAG_CPU_TRST, F1 UART0_RX, F2 UART0_TX, F15 BOOT_MS, F17 UART1_RTS, F18 UART1_CTS, G3 JTAG_CPU_TMS, G18 UART2_CTS, G19 UART1_RX, G20 UART1_TX, H17 UART2_TX, H18 UART2_RX, H19 UART2_RTS, K18 SPI0_SDO, K19 SPI0_SDI, K20 SPI0_CS_X, L19 SPI0_SCK
part F pins: A17 EPHY_TXN, A18 EPHY_RXN, B17 EPHY_TXP, B18 EPHY_RXP, D15 EPHY_RTX, M2 RMII0_REFCLKI, M3 RMII0_TXD1, N2 RMII0_TXEN, N3 RMII0_TXD0, P1 RMII0_MDCK, P2 RMII0_MDIO, P3 RMII0_RXD0, P4 RMII0_RST, R1 RMII0_RXDV, R2 RMII0_RXD1
part G pins: B20 XTAL_XOUT, C20 XTAL_XIN, D19 CLK32K, D20 CLK25M, E2 RSTN, N18 PWR_ON, N19 PWR_SEQ2, N20 PWR_SEQ3, P17 PWR_WAKEUP1, P19 PWR_BUTTON1, P20 PWR_SEQ1, R17 PWR_WAKEUP0, R18 RTC_MODE, R19 RTC_XIN, R20 RTC_XOUT
part H pins: A2 VI_DATA20 (power), A3 VI_DATA22 (power), A4 MIPIRX0_PAD1P (power), A5 MIPIRX0_PAD2P (power), A6 MIPIRX0_PAD3P (power), A7 MIPIRX0_PAD4P (power), A8 MIPIRX1_PAD4P (power), A9 MIPIRX1_PAD2P (power), A10 MIPIRX1_PAD0P (power), A11 PAD_MIPI_TXP0 (power), A12 PAD_MIPI_TXP2 (power), A13 PAD_MIPI_TXP3 (power), A14 VO_DATA0 (power), B2 VI_DATA19 (power), B3 VI_DATA21 (power), B4 MIPIRX0_PAD1N (power), B5 MIPIRX0_PAD2N (power), B6 MIPIRX0_PAD3N (power), B7 MIPIRX0_PAD4N (power), B8 MIPIRX1_PAD4N (power), B9 MIPIRX1_PAD2N (power), B10 MIPIRX1_PAD0N (power), B11 PAD_MIPI_TXM0 (power), B12 PAD_MIPI_TXM2 (power), B13 PAD_MIPI_TXM3 (power), B14 VO_DATA1 (power), C5 MIPIRX0_PAD0P (power), C6 MIPIRX0_PAD0N (power), C7 MIPIRX1_PAD3P (power), C8 MIPIRX1_PAD3N (power), C9 MIPIRX1_PAD1P (power), C10 MIPIRX1_PAD1N (power), C11 PAD_MIPI_TXP1 (power), C12 PAD_MIPI_TXM1 (power), C13 PAD_MIPI_TXM4 (power), D4 VI_DATA23 (power), D5 VI_DATA24 (power), D12 PAD_MIPI_TXP4 (power)
part I pins: C14 VDD18A_AUD (power), C16 VDD18A_EPHY (power), C17 VDD09A_EPHY (power), D7 VDD18A_MIPI (power), D8 VDD18A_MIPI (power), D11 VDD18A_MIPI (power), D16 VDD18A_USB, D17 VDD18A (power), D18 VDD09A_MIPI (power), E4 VDDIO18_0 (power), E17 VDD33A_EPHY (power), E18 VCC33A_USB, F7 VDDC (power), F8 VDDC (power), F11 VDDC (power), F12 VDDC (power), F14 VDD18A_EFUSE (power), G4 VDDIO_EMMC (power), G17 VDDIO18_1 (power), H6 VDDC (power), H14 VDDC_TPU (power), H15 VDDC_TPU (power), J4 VDDIO_SD0 (power), J6 VDDC (power), J14 VDDC_TPU (power), J15 VDDC_TPU (power), J17 VDDIO18_1 (power), K1 VIN3V (power), K3 VOUT (power), L6 VDDC (power), L14 VDDC_TPU (power), L15 VDDC_TPU (power), L17 VDDIO18_1 (power), M4 VDDIO18_RM0 (power), M6 VDDC (power), M14 VDDC_TPU (power), M15 VDDC_TPU (power), N4 VDDC_RM0 (power), N7 VDDC (power), N8 VDDC (power), N10 VDD18A_DDR (power), N12 VDDC (power), N13 VDDC (power), P18 PWR_VBAT_DET, R6 VDDQ (power), R7 VDDQ (power), R9 VDDQ (power), R10 VDDQ (power), R13 VDDQ (power), R14 VDDQ (power), T18 VDDIO_RTC (power), T19 VDDC_RTC (power)
part J pins: A1 VSSC (power), A20 VSSA (power), C4 VSSA (power), C19 VSSA (power), D6 VSSA (power), D9 VSSA (power), D10 VSSA (power), D13 VSSA_AUD (power), E19 VSSA (power), F6 VSSC (power), F9 VSSC (power), F10 VSSC (power), F13 VSSC (power), G6 VSSC (power), G7 VSSC (power), G8 VSSC (power), G9 VSSC (power), G10 VSSC (power), G11 VSSC (power), G12 VSSC (power), G13 VSSC (power), G14 VSSC (power), G15 VSSC (power), H7 VSSC (power), H8 VSSC (power), H9 VSSC (power), H10 VSSC (power), H11 VSSC (power), H12 VSSC (power), H13 VSSC (power), J7 VSSC (power), J8 VSSC (power), J9 VSSC (power), J10 VSSC (power), J11 VSSC (power), J12 VSSC (power), J13 VSSC (power), K6 VSSC (power), K7 VSSC (power), K8 VSSC (power), K9 VSSC (power), K10 VSSC (power), K11 VSSC (power), K12 VSSC (power), K13 VSSC (power), K14 VSSC (power), K15 VSSC (power), L7 VSSC (power), L8 VSSC (power), L9 VSSC (power), L10 VSSC (power), L11 VSSC (power), L12 VSSC (power), L13 VSSC (power), M7 VSSC (power), M8 VSSC (power), M9 VSSC (power), M10 VSSC (power), M11 VSSC (power), M12 VSSC (power), M13 VSSC (power), M20 VSSC (power), N6 VSSC (power), N9 VSSC (power), N11 VSSC (power), N14 VSSC (power), N17 VSSC (power), R3 VSSC (power), R4 VSSC (power), R5 VSSC (power), R8 VSSC (power), R11 VSSC (power), R12 VSSC (power), R16 VSSC (power), T1 VSSC (power), T2 VSSC (power), T8 VSSC (power), T10 VSSC (power), T11 VSSC (power), T13 VSSC (power), T14 VSSC (power), T16 VSSC (power), T17 VSSC (power), V3 VSSC (power), V6 VSSC (power), V9 VSSC (power), V12 VSSC (power), V15 VSSC (power), Y1 VSSC (power), Y20 VSSC (power)
part A text: MIU_internal

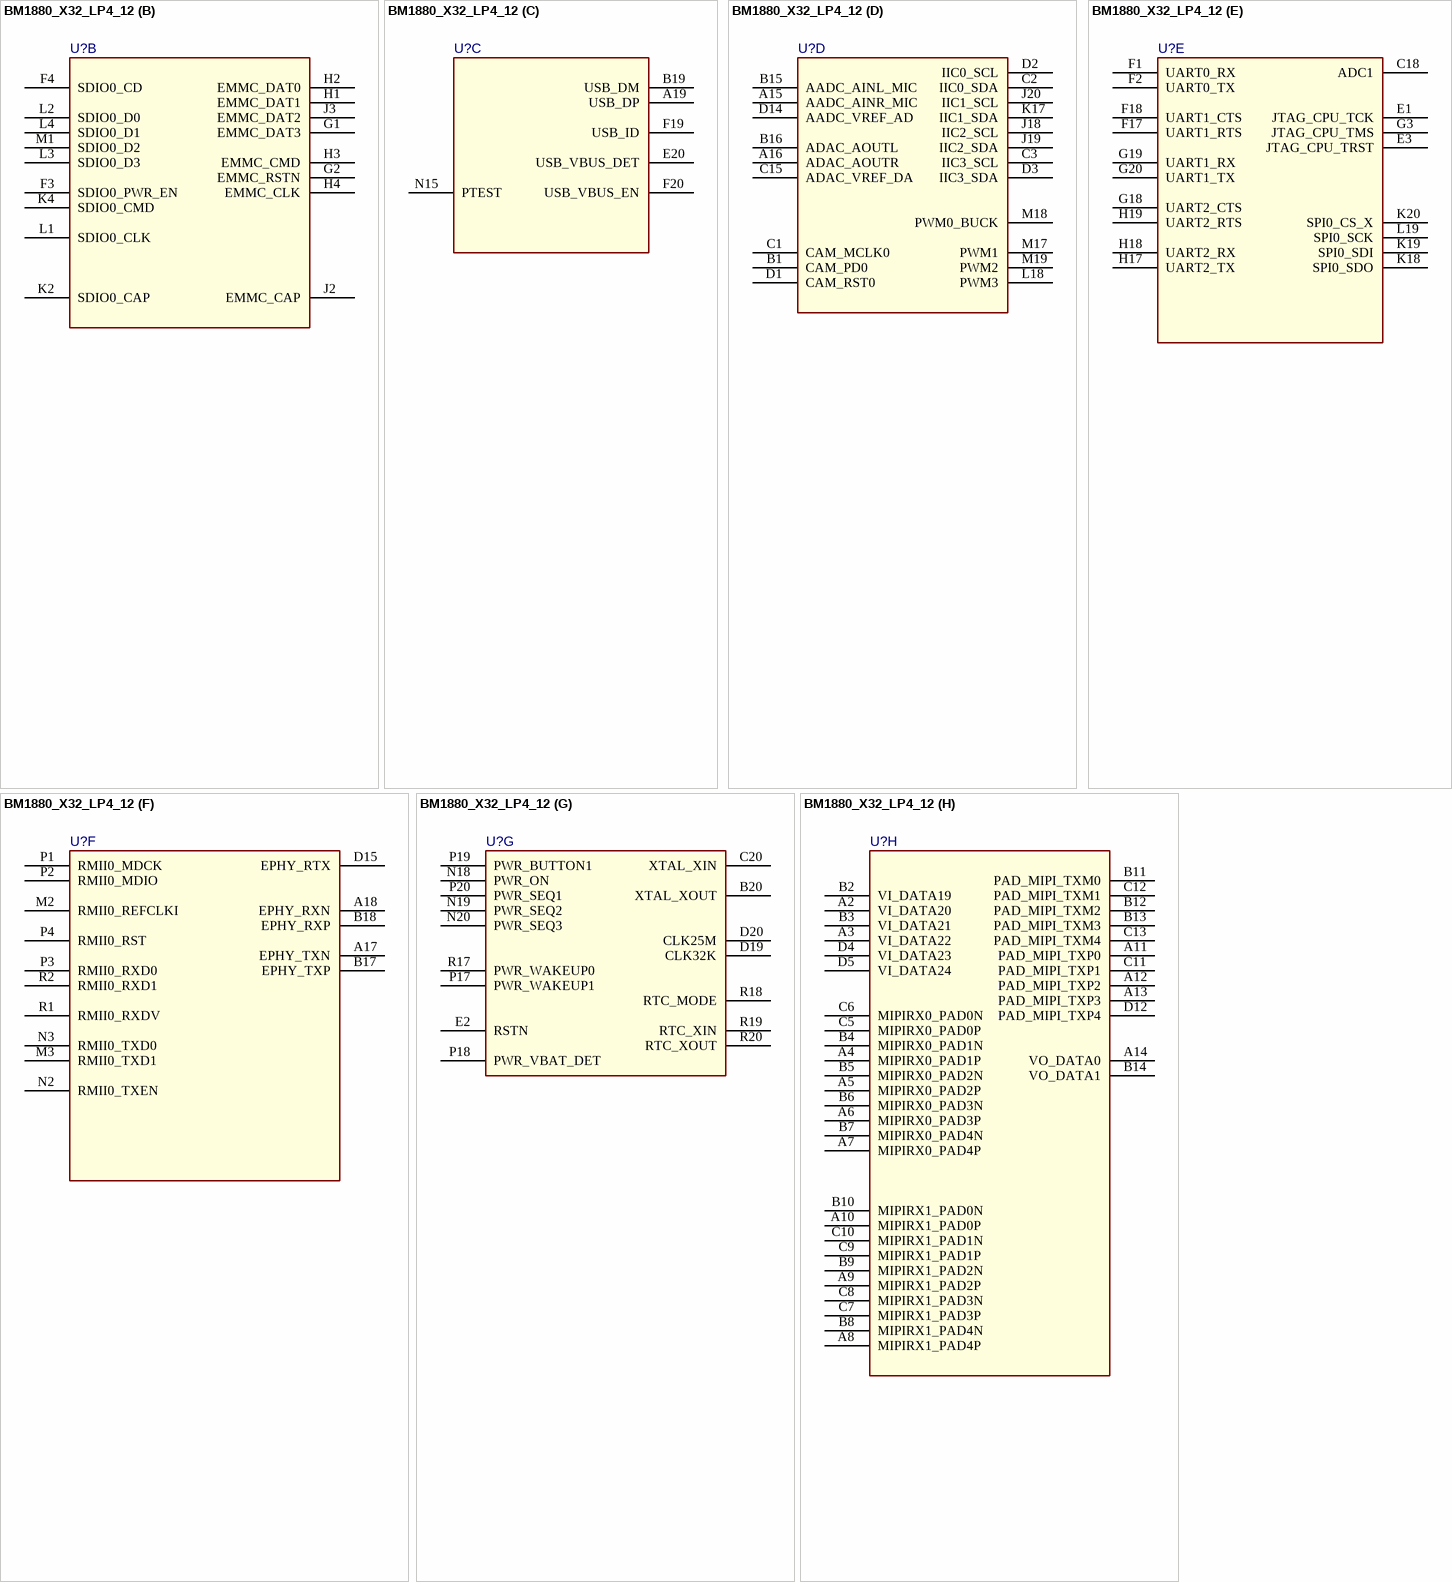
[diagram p23: symbol BM1880_X32_LP4_12]

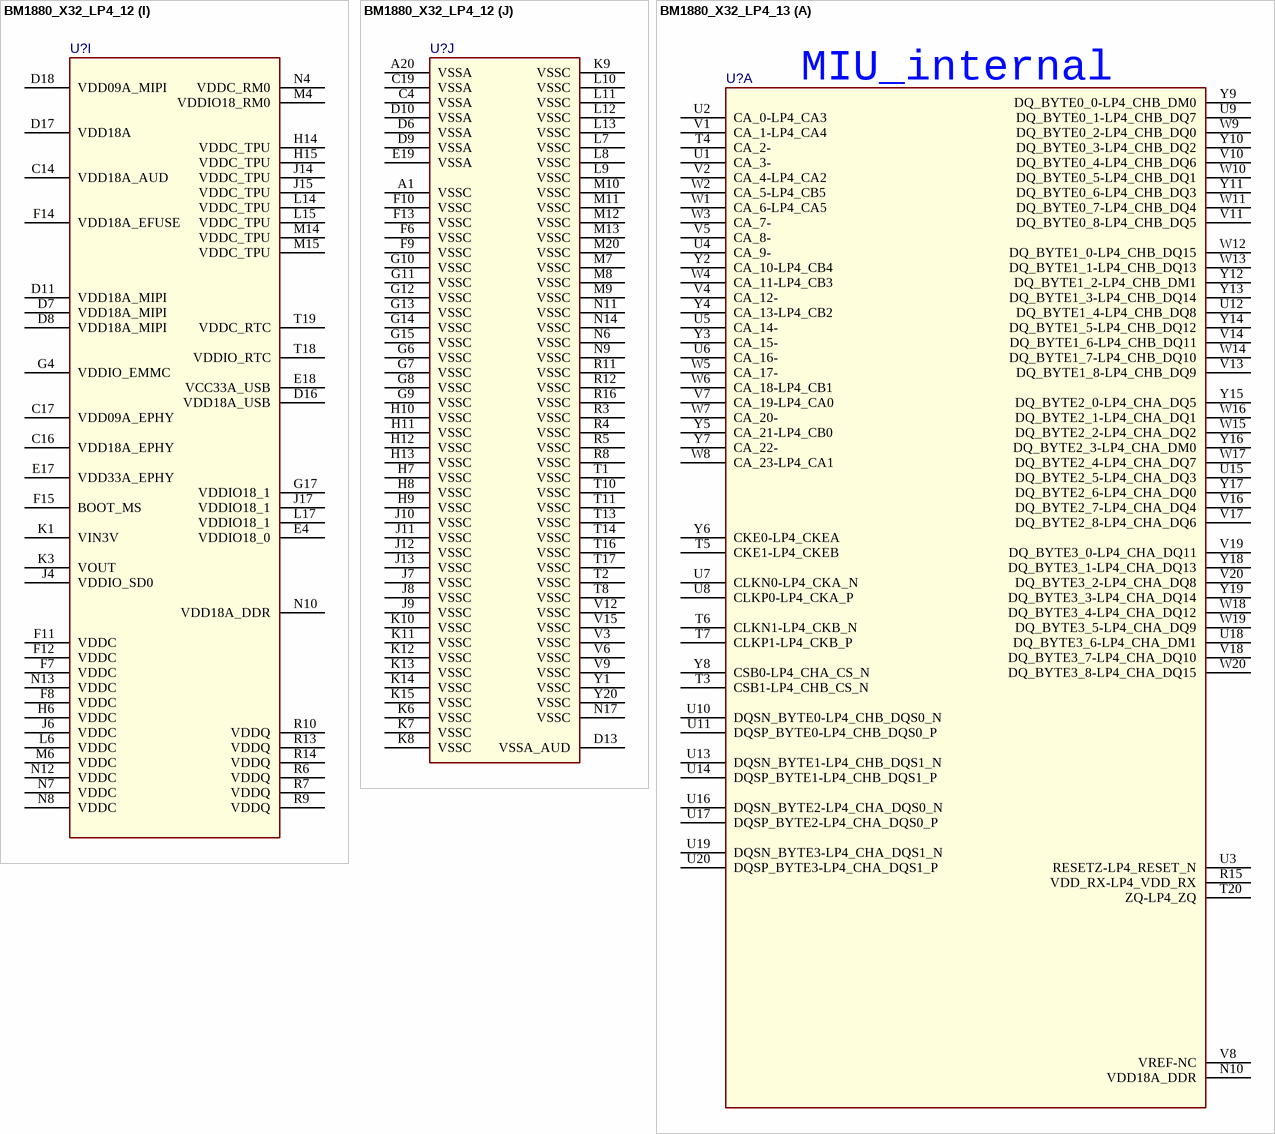
[diagram p24: symbols BM1880_X32_LP4_12 to BM1880_X32_LP4_13]

## BM1880_X32_LP4_12
designator U?
SPLIT_INST: TRUE; SWAP_INFO: (S1+S2+S3+S4+S5+S6+S7+S8+S9+S10)
footprint BGA378-26-2121-socket
part A pins: N10 VDD18A_DDR-NC, R15 VDD_RX-LP4_VDD_RX, T3 CSB1-LP4_CHB_CS_N, T4 CA_2-, T5 CKE1-LP4_CKEB, T6 CLKN1-LP4_CKB_N, T7 CLKP1-LP4_CKB_P, T20 ZQ-LP4_ZQ, U1 CA_3-, U2 CA_0-LP4_CA3, U3 RESETZ-LP4_RESET_N, U4 CA_9-, U5 CA_14-, U6 CA_16-, U7 CLKN0-LP4_CKA_N, U8 CLKP0-LP4_CKA_P, U9 DQ_BYTE0_1-LP4_CHB_DQ7, U10 DQSN_BYTE0-LP4_CHB_DQS0_N, U11 DQSP_BYTE0-LP4_CHB_DQS0_P, U12 DQ_BYTE1_4-LP4_CHB_DQ8, U13 DQSN_BYTE1-LP4_CHB_DQS1_N, U14 DQSP_BYTE1-LP4_CHB_DQS1_P, U15 DQ_BYTE2_5-LP4_CHA_DQ3, U16 DQSN_BYTE2-LP4_CHA_DQS0_N, U17 DQSP_BYTE2-LP4_CHA_DQS0_P, U18 DQ_BYTE3_6-LP4_CHA_DM1, U19 DQSN_BYTE3-LP4_CHA_DQS1_N, U20 DQSP_BYTE3-LP4_CHA_DQS1_P, V1 CA_1-LP4_CA4, V2 CA_4-LP4_CA2, V4 CA_12-, V5 CA_8-, V7 CA_19-LP4_CA0, V8 VREF-NC, V10 DQ_BYTE0_4-LP4_CHB_DQ6, V11 DQ_BYTE0_8-LP4_CHB_DQ5, V13 DQ_BYTE1_8-LP4_CHB_DQ9, V14 DQ_BYTE1_6-LP4_CHB_DQ11, V16 DQ_BYTE2_7-LP4_CHA_DQ4, V17 DQ_BYTE2_8-LP4_CHA_DQ6, V18 DQ_BYTE3_7-LP4_CHA_DQ10, V19 DQ_BYTE3_0-LP4_CHA_DQ11, V20 DQ_BYTE3_2-LP4_CHA_DQ8, W1 CA_6-LP4_CA5, W2 CA_5-LP4_CB5, W3 CA_7-, W4 CA_11-LP4_CB3, W5 CA_17-, W6 CA_18-LP4_CB1, W7 CA_20-, W8 CA_23-LP4_CA1, W9 DQ_BYTE0_2-LP4_CHB_DQ0, W10 DQ_BYTE0_5-LP4_CHB_DQ1, W11 DQ_BYTE0_7-LP4_CHB_DQ4, W12 DQ_BYTE1_0-LP4_CHB_DQ15, W13 DQ_BYTE1_1-LP4_CHB_DQ13, W14 DQ_BYTE1_7-LP4_CHB_DQ10, W15 DQ_BYTE2_2-LP4_CHA_DQ2, W16 DQ_BYTE2_1-LP4_CHA_DQ1, W17 DQ_BYTE2_4-LP4_CHA_DQ7, W18 DQ_BYTE3_4-LP4_CHA_DQ12, W19 DQ_BYTE3_5-LP4_CHA_DQ9, W20 DQ_BYTE3_8-LP4_CHA_DQ15, Y2 CA_10-LP4_CB4, Y3 CA_15-, Y4 CA_13-LP4_CB2, Y5 CA_21-LP4_CB0, Y6 CKE0-LP4_CKEA, Y7 CA_22-, Y8 CSB0-LP4_CHA_CS_N, Y9 DQ_BYTE0_0-LP4_CHB_DM0, Y10 DQ_BYTE0_3-LP4_CHB_DQ2, Y11 DQ_BYTE0_6-LP4_CHB_DQ3, Y12 DQ_BYTE1_2-LP4_CHB_DM1, Y13 DQ_BYTE1_3-LP4_CHB_DQ14, Y14 DQ_BYTE1_5-LP4_CHB_DQ12, Y15 DQ_BYTE2_0-LP4_CHA_DQ5, Y16 DQ_BYTE2_3-LP4_CHA_DM0, Y17 DQ_BYTE2_6-LP4_CHA_DQ0, Y18 DQ_BYTE3_1-LP4_CHA_DQ13, Y19 DQ_BYTE3_3-LP4_CHA_DQ14
part B pins: F3 SDIO0_PWR_EN, F4 SDIO0_CD, G1 EMMC_DAT3, G2 EMMC_RSTN, H1 EMMC_DAT1, H2 EMMC_DAT0, H3 EMMC_CMD, H4 EMMC_CLK, J2 EMMC_CAP, J3 EMMC_DAT2, K2 SDIO0_CAP, K4 SDIO0_CMD, L1 SDIO0_CLK, L2 SDIO0_D0, L3 SDIO0_D3, L4 SDIO0_D1, M1 SDIO0_D2
part C pins: A19 USB_DP (power), B19 USB_DM (power), E20 USB_VBUS_DET (power), F19 USB_ID (power), F20 USB_VBUS_EN, N15 PTEST
part D pins: A15 AADC_AINR_MIC, A16 ADAC_AOUTR, B1 CAM_PD0, B15 AADC_AINL_MIC, B16 ADAC_AOUTL, C1 CAM_MCLK0, C2 IIC0_SDA, C3 IIC3_SCL, C15 ADAC_VREF_DA, D1 CAM_RST0, D2 IIC0_SCL, D3 IIC3_SDA, D14 AADC_VREF_AD, J18 IIC2_SCL, J19 IIC2_SDA, J20 IIC1_SCL, K17 IIC1_SDA, L18 PWM3, M17 PWM1, M18 PWM0_BUCK, M19 PWM2
part E pins: C18 ADC1, E1 JTAG_CPU_TCK, E3 JTAG_CPU_TRST, F1 UART0_RX, F2 UART0_TX, F17 UART1_RTS, F18 UART1_CTS, G3 JTAG_CPU_TMS, G18 UART2_CTS, G19 UART1_RX, G20 UART1_TX, H17 UART2_TX, H18 UART2_RX, H19 UART2_RTS, K18 SPI0_SDO, K19 SPI0_SDI, K20 SPI0_CS_X, L19 SPI0_SCK
part F pins: A17 EPHY_TXN, A18 EPHY_RXN, B17 EPHY_TXP, B18 EPHY_RXP, D15 EPHY_RTX, M2 RMII0_REFCLKI, M3 RMII0_TXD1, N2 RMII0_TXEN, N3 RMII0_TXD0, P1 RMII0_MDCK, P2 RMII0_MDIO, P3 RMII0_RXD0, P4 RMII0_RST, R1 RMII0_RXDV, R2 RMII0_RXD1
part G pins: B20 XTAL_XOUT, C20 XTAL_XIN, D19 CLK32K, D20 CLK25M, E2 RSTN, N18 PWR_ON, N19 PWR_SEQ2, N20 PWR_SEQ3, P17 PWR_WAKEUP1, P18 PWR_VBAT_DET, P19 PWR_BUTTON1, P20 PWR_SEQ1, R17 PWR_WAKEUP0, R18 RTC_MODE, R19 RTC_XIN, R20 RTC_XOUT
part H pins: A2 VI_DATA20 (power), A3 VI_DATA22 (power), A4 MIPIRX0_PAD1P (power), A5 MIPIRX0_PAD2P (power), A6 MIPIRX0_PAD3P (power), A7 MIPIRX0_PAD4P (power), A8 MIPIRX1_PAD4P (power), A9 MIPIRX1_PAD2P (power), A10 MIPIRX1_PAD0P (power), A11 PAD_MIPI_TXP0 (power), A12 PAD_MIPI_TXP2 (power), A13 PAD_MIPI_TXP3 (power), A14 VO_DATA0 (power), B2 VI_DATA19 (power), B3 VI_DATA21 (power), B4 MIPIRX0_PAD1N (power), B5 MIPIRX0_PAD2N (power), B6 MIPIRX0_PAD3N (power), B7 MIPIRX0_PAD4N (power), B8 MIPIRX1_PAD4N (power), B9 MIPIRX1_PAD2N (power), B10 MIPIRX1_PAD0N (power), B11 PAD_MIPI_TXM0 (power), B12 PAD_MIPI_TXM2 (power), B13 PAD_MIPI_TXM3 (power), B14 VO_DATA1 (power), C5 MIPIRX0_PAD0P (power), C6 MIPIRX0_PAD0N (power), C7 MIPIRX1_PAD3P (power), C8 MIPIRX1_PAD3N (power), C9 MIPIRX1_PAD1P (power), C10 MIPIRX1_PAD1N (power), C11 PAD_MIPI_TXP1 (power), C12 PAD_MIPI_TXM1 (power), C13 PAD_MIPI_TXM4 (power), D4 VI_DATA23 (power), D5 VI_DATA24 (power), D12 PAD_MIPI_TXP4 (power)
part I pins: C14 VDD18A_AUD (power), C16 VDD18A_EPHY (power), C17 VDD09A_EPHY (power), D7 VDD18A_MIPI (power), D8 VDD18A_MIPI (power), D11 VDD18A_MIPI (power), D16 VDD18A_USB, D17 VDD18A (power), D18 VDD09A_MIPI (power), E4 VDDIO18_0 (power), E17 VDD33A_EPHY (power), E18 VCC33A_USB, F7 VDDC (power), F8 VDDC (power), F11 VDDC (power), F12 VDDC (power), F14 VDD18A_EFUSE (power), F15 BOOT_MS, G4 VDDIO_EMMC (power), G17 VDDIO18_1 (power), H6 VDDC (power), H14 VDDC_TPU (power), H15 VDDC_TPU (power), J4 VDDIO_SD0 (power), J6 VDDC (power), J14 VDDC_TPU (power), J15 VDDC_TPU (power), J17 VDDIO18_1 (power), K1 VIN3V (power), K3 VOUT (power), L6 VDDC (power), L14 VDDC_TPU (power), L15 VDDC_TPU (power), L17 VDDIO18_1 (power), M4 VDDIO18_RM0 (power), M6 VDDC (power), M14 VDDC_TPU (power), M15 VDDC_TPU (power), N4 VDDC_RM0 (power), N7 VDDC (power), N8 VDDC (power), N10 VDD18A_DDR (power), N12 VDDC (power), N13 VDDC (power), R6 VDDQ (power), R7 VDDQ (power), R9 VDDQ (power), R10 VDDQ (power), R13 VDDQ (power), R14 VDDQ (power), T18 VDDIO_RTC (power), T19 VDDC_RTC (power)
part J pins: A1 VSSC (power), A20 VSSA (power), C4 VSSA (power), C19 VSSA (power), D6 VSSA (power), D9 VSSA (power), D10 VSSA (power), D13 VSSA_AUD (power), E19 VSSA (power), F6 VSSC (power), F9 VSSC (power), F10 VSSC (power), F13 VSSC (power), G6 VSSC (power), G7 VSSC (power), G8 VSSC (power), G9 VSSC (power), G10 VSSC (power), G11 VSSC (power), G12 VSSC (power), G13 VSSC (power), G14 VSSC (power), G15 VSSC (power), H7 VSSC (power), H8 VSSC (power), H9 VSSC (power), H10 VSSC (power), H11 VSSC (power), H12 VSSC (power), H13 VSSC (power), J7 VSSC (power), J8 VSSC (power), J9 VSSC (power), J10 VSSC (power), J11 VSSC (power), J12 VSSC (power), J13 VSSC (power), K6 VSSC (power), K7 VSSC (power), K8 VSSC (power), K9 VSSC (power), K10 VSSC (power), K11 VSSC (power), K12 VSSC (power), K13 VSSC (power), K14 VSSC (power), K15 VSSC (power), L7 VSSC (power), L8 VSSC (power), L9 VSSC (power), L10 VSSC (power), L11 VSSC (power), L12 VSSC (power), L13 VSSC (power), M7 VSSC (power), M8 VSSC (power), M9 VSSC (power), M10 VSSC (power), M11 VSSC (power), M12 VSSC (power), M13 VSSC (power), M20 VSSC (power), N6 VSSC (power), N9 VSSC (power), N11 VSSC (power), N14 VSSC (power), N17 VSSC (power), R3 VSSC (power), R4 VSSC (power), R5 VSSC (power), R8 VSSC (power), R11 VSSC (power), R12 VSSC (power), R16 VSSC (power), T1 VSSC (power), T2 VSSC (power), T8 VSSC (power), T10 VSSC (power), T11 VSSC (power), T13 VSSC (power), T14 VSSC (power), T16 VSSC (power), T17 VSSC (power), V3 VSSC (power), V6 VSSC (power), V9 VSSC (power), V12 VSSC (power), V15 VSSC (power), Y1 VSSC (power), Y20 VSSC (power)
part A text: MIU_internal

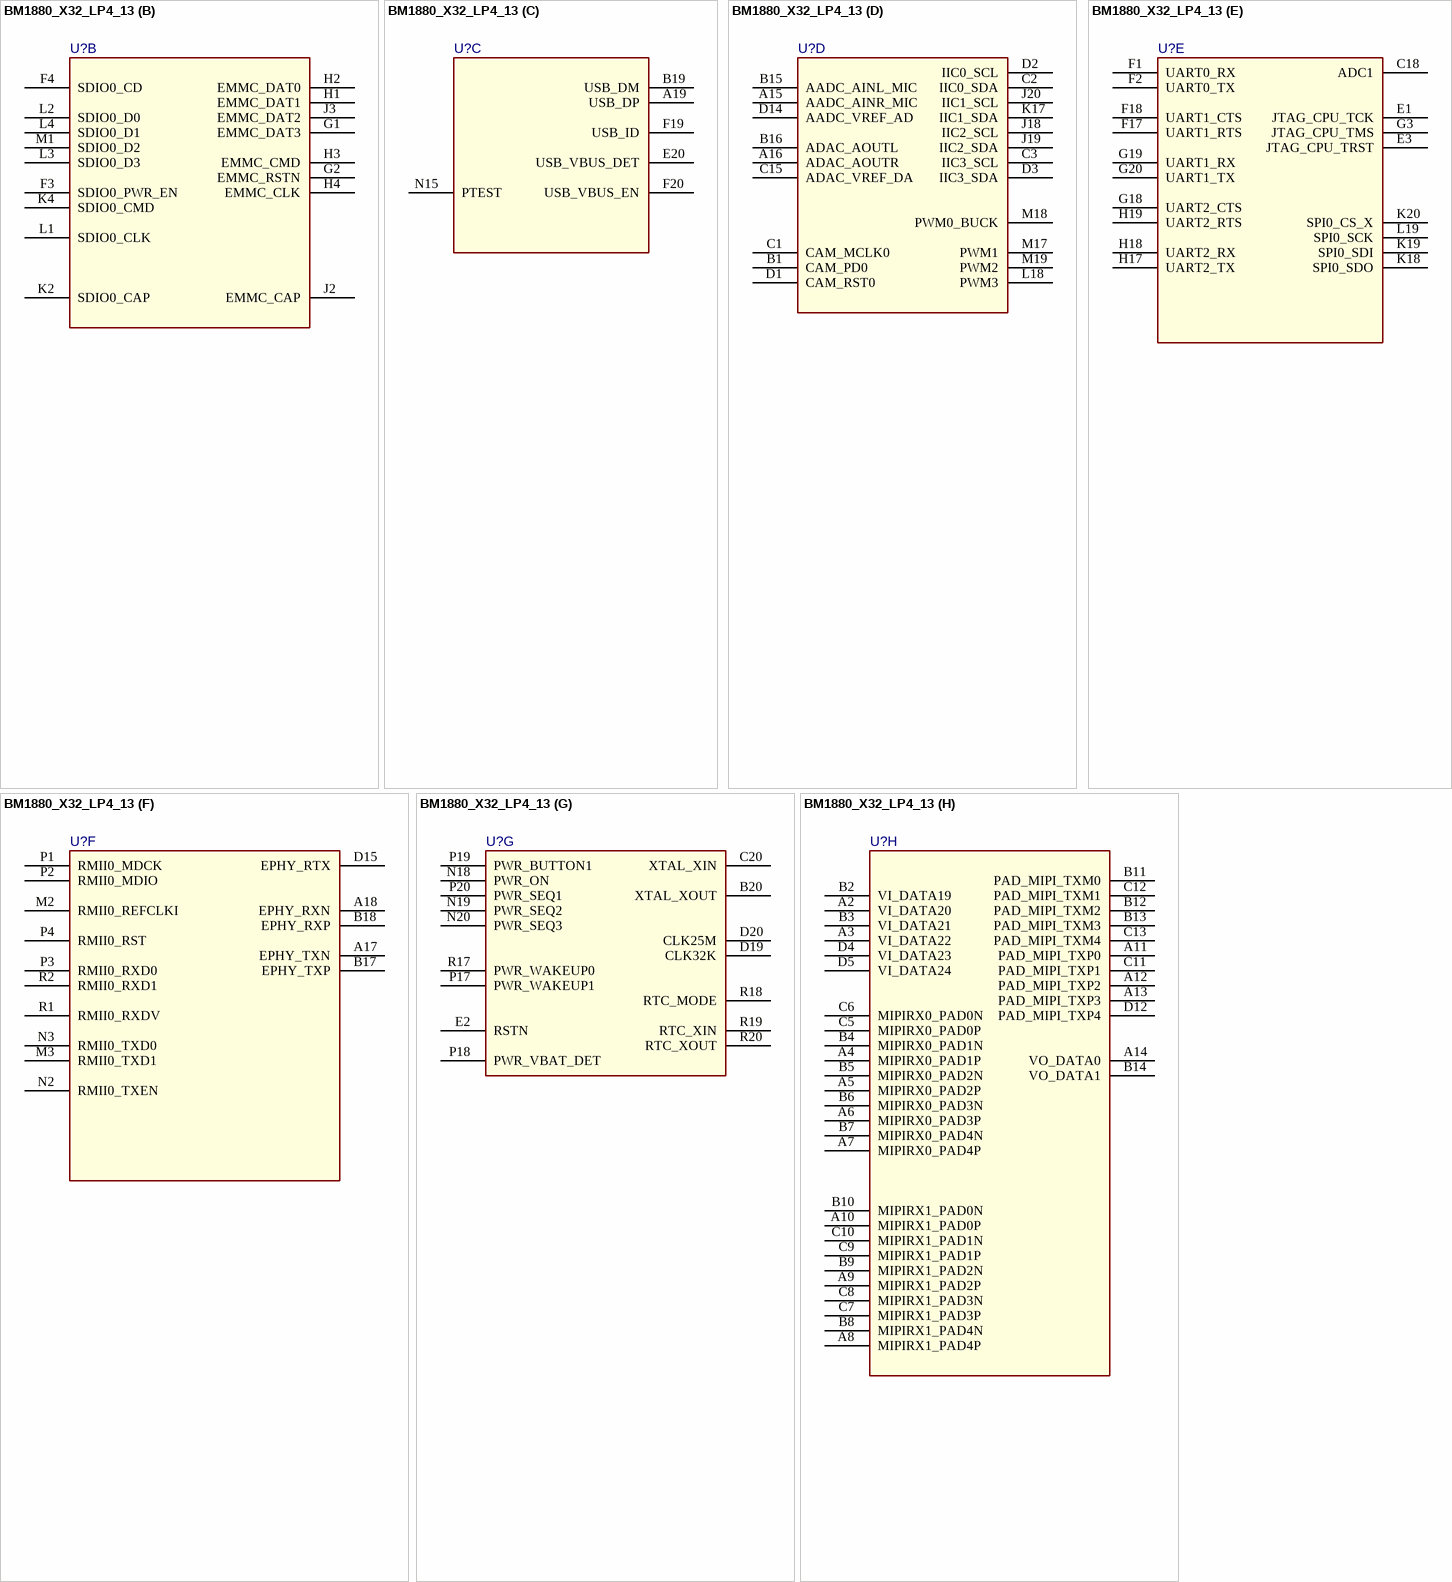
[diagram p25: symbol BM1880_X32_LP4_13]

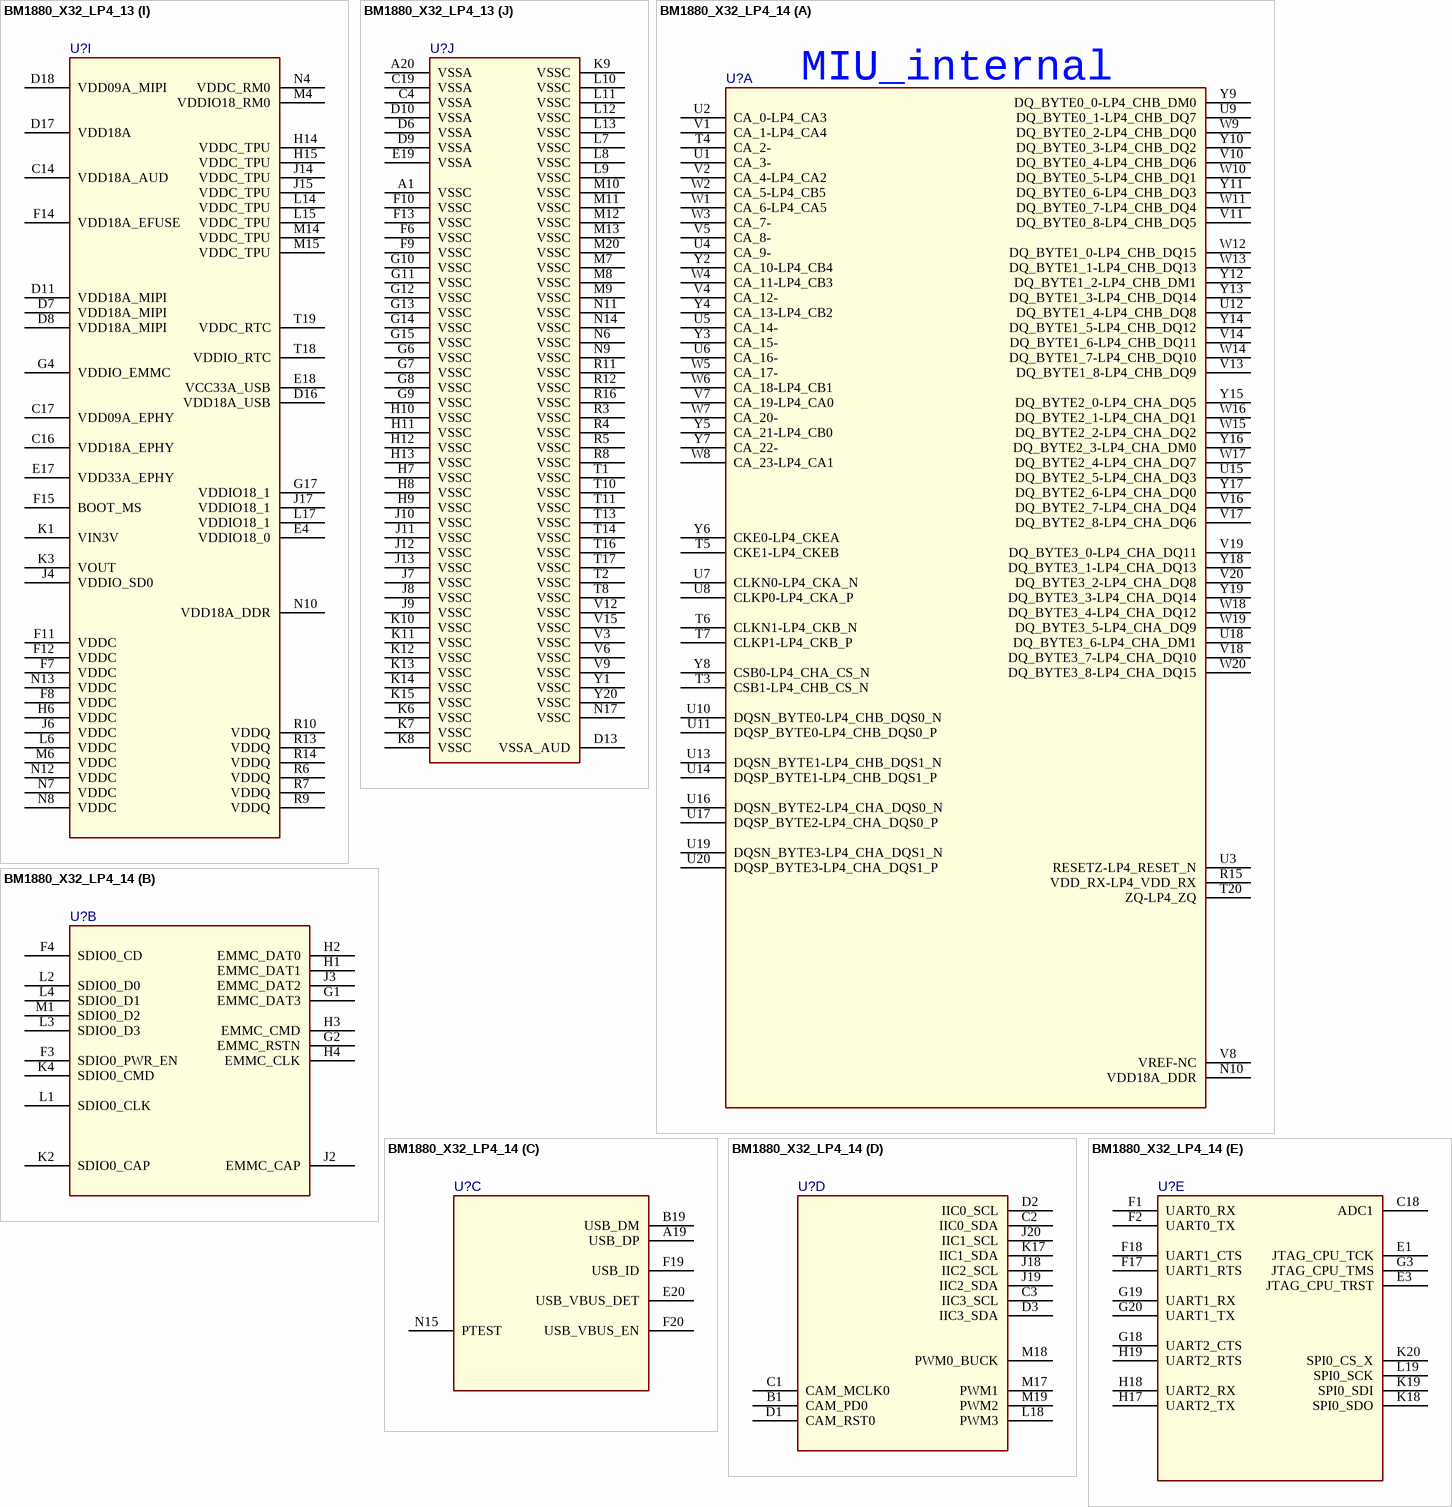
[diagram p26: symbols BM1880_X32_LP4_13 to BM1880_X32_LP4_14]